# Altium schematic symbol library AudioMoth 1.1.SCHLIB: 220 symbols (part 2 of 3)
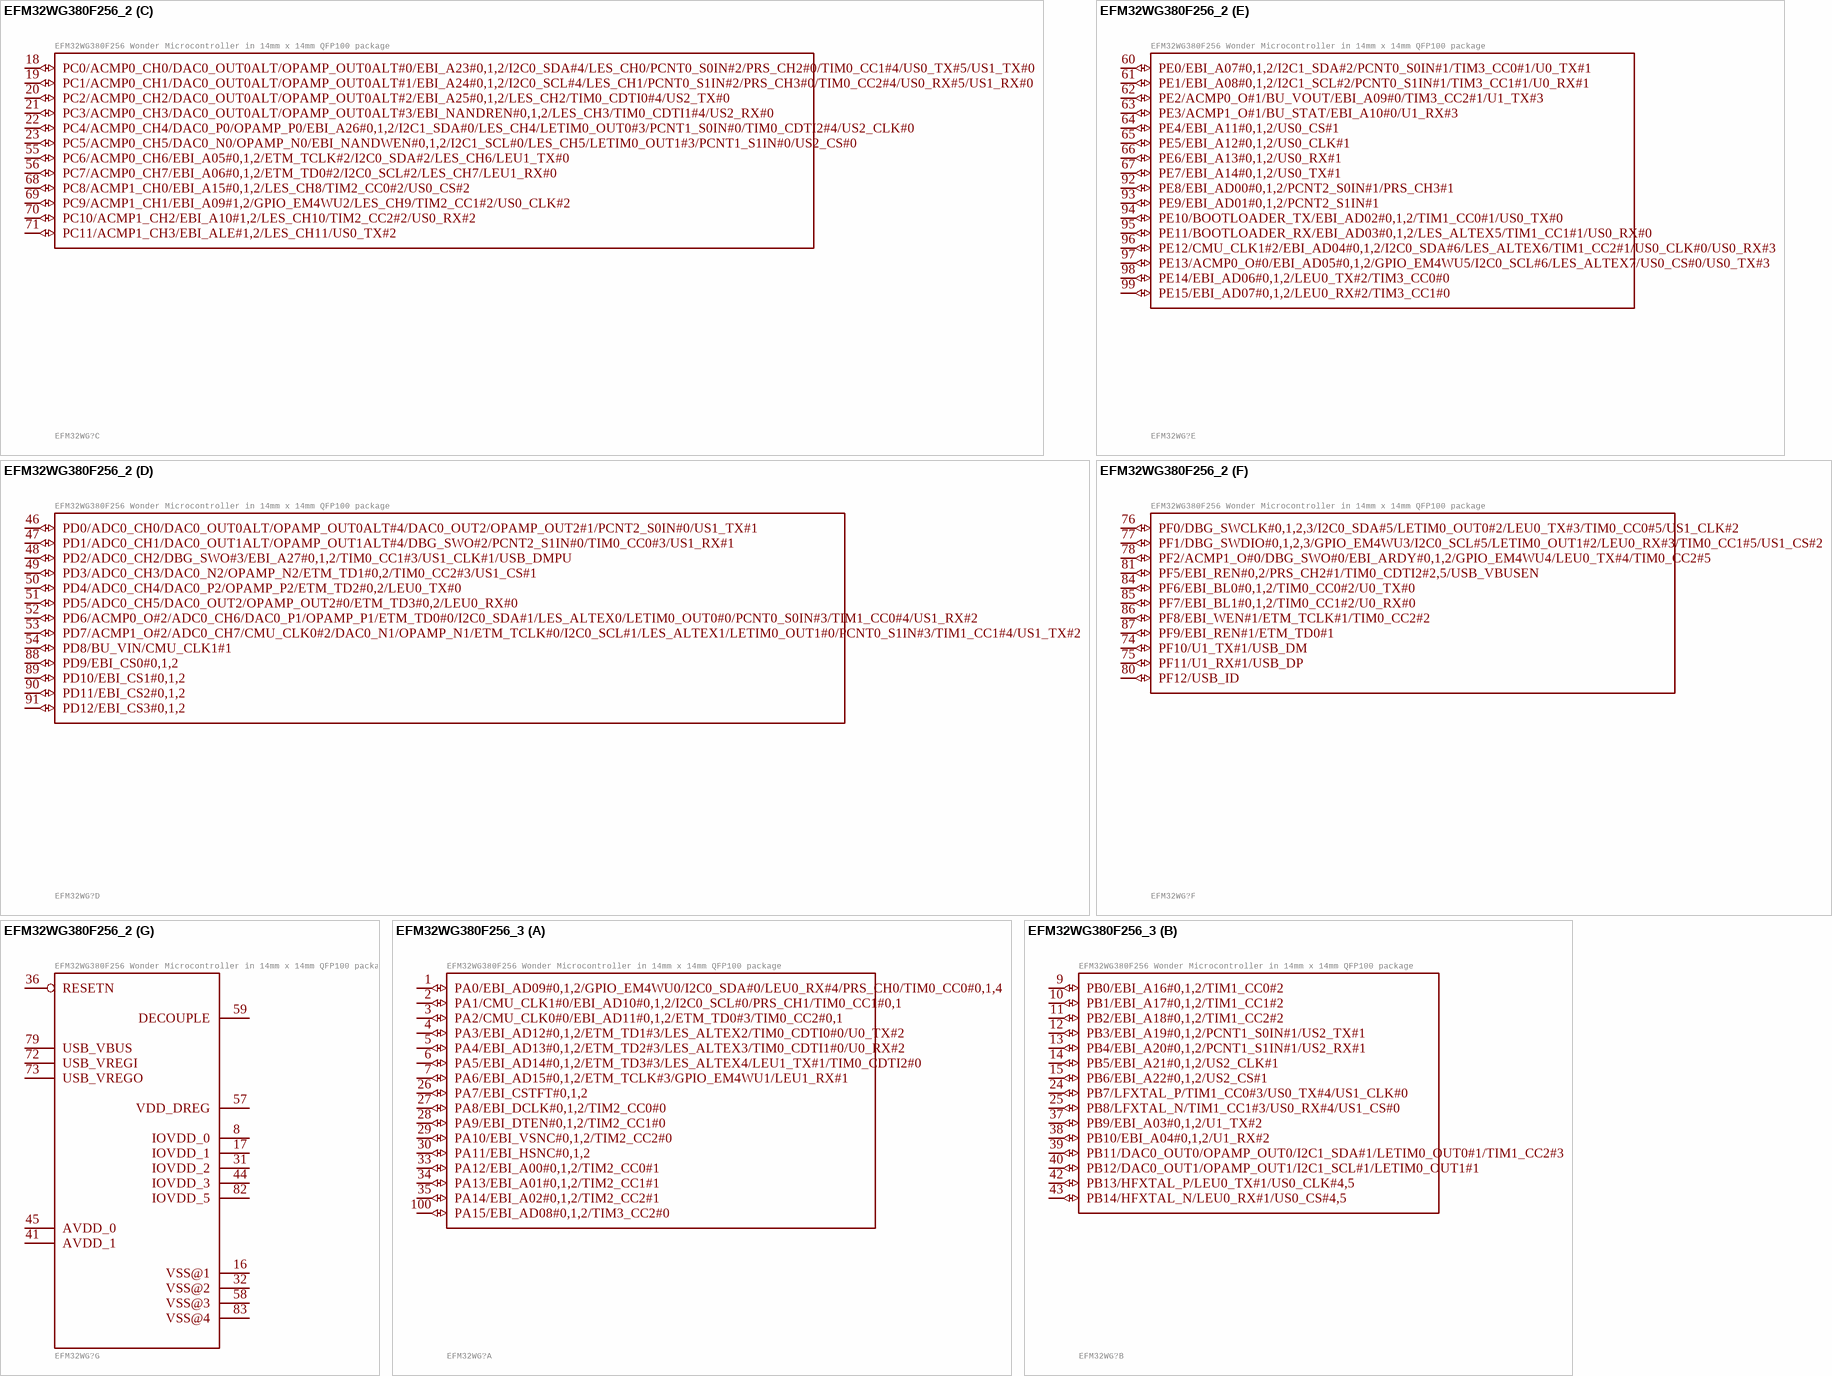
[diagram p15: symbols EFM32WG380F256_2 to EFM32WG380F256_3]

## EFM32WG380F256_2
designator EFM32WG?, comment EFM32WG380F256 Wonder Microcontroller in 14mm x 14mm QFP100 package
GateName_1: A; SymbolName_1: EFM32WG380F256_A; GateName_2: B; SymbolName_2: EFM32WG380F256_B; GateName_3: C; SymbolName_3: EFM32WG380F256_C; GateName_4: D; SymbolName_4: EFM32WG380F256_D; GateName_5: E; SymbolName_5: EFM32WG380F256_E; GateName_6: F; SymbolName_6: EFM32WG380F256_F; GateName_7: PWR; SymbolName_7: EFM32WG380F256_PWR; LibraryName: AudioMoth 1.1.0; DeviceSetName: EFM32WG380F256; Package: QFP100
footprint QFP100
part A pins: 1 PA0/EBI_AD09#0,1,2/GPIO_EM4WU0/I2C0_SDA#0/LEU0_RX#4/PRS_CH0/TIM0_CC0#0,1,4 (io), 2 PA1/CMU_CLK1#0/EBI_AD10#0,1,2/I2C0_SCL#0/PRS_CH1/TIM0_CC1#0,1 (io), 3 PA2/CMU_CLK0#0/EBI_AD11#0,1,2/ETM_TD0#3/TIM0_CC2#0,1 (io), 4 PA3/EBI_AD12#0,1,2/ETM_TD1#3/LES_ALTEX2/TIM0_CDTI0#0/U0_TX#2 (io), 5 PA4/EBI_AD13#0,1,2/ETM_TD2#3/LES_ALTEX3/TIM0_CDTI1#0/U0_RX#2 (io), 6 PA5/EBI_AD14#0,1,2/ETM_TD3#3/LES_ALTEX4/LEU1_TX#1/TIM0_CDTI2#0 (io), 7 PA6/EBI_AD15#0,1,2/ETM_TCLK#3/GPIO_EM4WU1/LEU1_RX#1 (io), 26 PA7/EBI_CSTFT#0,1,2 (io), 27 PA8/EBI_DCLK#0,1,2/TIM2_CC0#0 (io), 28 PA9/EBI_DTEN#0,1,2/TIM2_CC1#0 (io), 29 PA10/EBI_VSNC#0,1,2/TIM2_CC2#0 (io), 30 PA11/EBI_HSNC#0,1,2 (io), 33 PA12/EBI_A00#0,1,2/TIM2_CC0#1 (io), 34 PA13/EBI_A01#0,1,2/TIM2_CC1#1 (io), 35 PA14/EBI_A02#0,1,2/TIM2_CC2#1 (io), 100 PA15/EBI_AD08#0,1,2/TIM3_CC2#0 (io)
part B pins: 9 PB0/EBI_A16#0,1,2/TIM1_CC0#2 (io), 10 PB1/EBI_A17#0,1,2/TIM1_CC1#2 (io), 11 PB2/EBI_A18#0,1,2/TIM1_CC2#2 (io), 12 PB3/EBI_A19#0,1,2/PCNT1_S0IN#1/US2_TX#1 (io), 13 PB4/EBI_A20#0,1,2/PCNT1_S1IN#1/US2_RX#1 (io), 14 PB5/EBI_A21#0,1,2/US2_CLK#1 (io), 15 PB6/EBI_A22#0,1,2/US2_CS#1 (io), 24 PB7/LFXTAL_P/TIM1_CC0#3/US0_TX#4/US1_CLK#0 (io), 25 PB8/LFXTAL_N/TIM1_CC1#3/US0_RX#4/US1_CS#0 (io), 37 PB9/EBI_A03#0,1,2/U1_TX#2 (io), 38 PB10/EBI_A04#0,1,2/U1_RX#2 (io), 39 PB11/DAC0_OUT0/OPAMP_OUT0/I2C1_SDA#1/LETIM0_OUT0#1/TIM1_CC2#3 (io), 40 PB12/DAC0_OUT1/OPAMP_OUT1/I2C1_SCL#1/LETIM0_OUT1#1 (io), 42 PB13/HFXTAL_P/LEU0_TX#1/US0_CLK#4,5 (io), 43 PB14/HFXTAL_N/LEU0_RX#1/US0_CS#4,5 (io)
part C pins: 18 PC0/ACMP0_CH0/DAC0_OUT0ALT/OPAMP_OUT0ALT#0/EBI_A23#0,1,2/I2C0_SDA#4/LES_CH0/PCNT0_S0IN#2/PRS_CH2#0/TIM0_CC1#4/US0_TX#5/US1_TX#0 (io), 19 PC1/ACMP0_CH1/DAC0_OUT0ALT/OPAMP_OUT0ALT#1/EBI_A24#0,1,2/I2C0_SCL#4/LES_CH1/PCNT0_S1IN#2/PRS_CH3#0/TIM0_CC2#4/US0_RX#5/US1_RX#0 (io), 20 PC2/ACMP0_CH2/DAC0_OUT0ALT/OPAMP_OUT0ALT#2/EBI_A25#0,1,2/LES_CH2/TIM0_CDTI0#4/US2_TX#0 (io), 21 PC3/ACMP0_CH3/DAC0_OUT0ALT/OPAMP_OUT0ALT#3/EBI_NANDREN#0,1,2/LES_CH3/TIM0_CDTI1#4/US2_RX#0 (io), 22 PC4/ACMP0_CH4/DAC0_P0/OPAMP_P0/EBI_A26#0,1,2/I2C1_SDA#0/LES_CH4/LETIM0_OUT0#3/PCNT1_S0IN#0/TIM0_CDTI2#4/US2_CLK#0 (io), 23 PC5/ACMP0_CH5/DAC0_N0/OPAMP_N0/EBI_NANDWEN#0,1,2/I2C1_SCL#0/LES_CH5/LETIM0_OUT1#3/PCNT1_S1IN#0/US2_CS#0 (io), 55 PC6/ACMP0_CH6/EBI_A05#0,1,2/ETM_TCLK#2/I2C0_SDA#2/LES_CH6/LEU1_TX#0 (io), 56 PC7/ACMP0_CH7/EBI_A06#0,1,2/ETM_TD0#2/I2C0_SCL#2/LES_CH7/LEU1_RX#0 (io), 68 PC8/ACMP1_CH0/EBI_A15#0,1,2/LES_CH8/TIM2_CC0#2/US0_CS#2 (io), 69 PC9/ACMP1_CH1/EBI_A09#1,2/GPIO_EM4WU2/LES_CH9/TIM2_CC1#2/US0_CLK#2 (io), 70 PC10/ACMP1_CH2/EBI_A10#1,2/LES_CH10/TIM2_CC2#2/US0_RX#2 (io), 71 PC11/ACMP1_CH3/EBI_ALE#1,2/LES_CH11/US0_TX#2 (io)
part D pins: 46 PD0/ADC0_CH0/DAC0_OUT0ALT/OPAMP_OUT0ALT#4/DAC0_OUT2/OPAMP_OUT2#1/PCNT2_S0IN#0/US1_TX#1 (io), 47 PD1/ADC0_CH1/DAC0_OUT1ALT/OPAMP_OUT1ALT#4/DBG_SWO#2/PCNT2_S1IN#0/TIM0_CC0#3/US1_RX#1 (io), 48 PD2/ADC0_CH2/DBG_SWO#3/EBI_A27#0,1,2/TIM0_CC1#3/US1_CLK#1/USB_DMPU (io), 49 PD3/ADC0_CH3/DAC0_N2/OPAMP_N2/ETM_TD1#0,2/TIM0_CC2#3/US1_CS#1 (io), 50 PD4/ADC0_CH4/DAC0_P2/OPAMP_P2/ETM_TD2#0,2/LEU0_TX#0 (io), 51 PD5/ADC0_CH5/DAC0_OUT2/OPAMP_OUT2#0/ETM_TD3#0,2/LEU0_RX#0 (io), 52 PD6/ACMP0_O#2/ADC0_CH6/DAC0_P1/OPAMP_P1/ETM_TD0#0/I2C0_SDA#1/LES_ALTEX0/LETIM0_OUT0#0/PCNT0_S0IN#3/TIM1_CC0#4/US1_RX#2 (io), 53 PD7/ACMP1_O#2/ADC0_CH7/CMU_CLK0#2/DAC0_N1/OPAMP_N1/ETM_TCLK#0/I2C0_SCL#1/LES_ALTEX1/LETIM0_OUT1#0/PCNT0_S1IN#3/TIM1_CC1#4/US1_TX#2 (io), 54 PD8/BU_VIN/CMU_CLK1#1 (io), 88 PD9/EBI_CS0#0,1,2 (io), 89 PD10/EBI_CS1#0,1,2 (io), 90 PD11/EBI_CS2#0,1,2 (io), 91 PD12/EBI_CS3#0,1,2 (io)
part E pins: 60 PE0/EBI_A07#0,1,2/I2C1_SDA#2/PCNT0_S0IN#1/TIM3_CC0#1/U0_TX#1 (io), 61 PE1/EBI_A08#0,1,2/I2C1_SCL#2/PCNT0_S1IN#1/TIM3_CC1#1/U0_RX#1 (io), 62 PE2/ACMP0_O#1/BU_VOUT/EBI_A09#0/TIM3_CC2#1/U1_TX#3 (io), 63 PE3/ACMP1_O#1/BU_STAT/EBI_A10#0/U1_RX#3 (io), 64 PE4/EBI_A11#0,1,2/US0_CS#1 (io), 65 PE5/EBI_A12#0,1,2/US0_CLK#1 (io), 66 PE6/EBI_A13#0,1,2/US0_RX#1 (io), 67 PE7/EBI_A14#0,1,2/US0_TX#1 (io), 92 PE8/EBI_AD00#0,1,2/PCNT2_S0IN#1/PRS_CH3#1 (io), 93 PE9/EBI_AD01#0,1,2/PCNT2_S1IN#1 (io), 94 PE10/BOOTLOADER_TX/EBI_AD02#0,1,2/TIM1_CC0#1/US0_TX#0 (io), 95 PE11/BOOTLOADER_RX/EBI_AD03#0,1,2/LES_ALTEX5/TIM1_CC1#1/US0_RX#0 (io), 96 PE12/CMU_CLK1#2/EBI_AD04#0,1,2/I2C0_SDA#6/LES_ALTEX6/TIM1_CC2#1/US0_CLK#0/US0_RX#3 (io), 97 PE13/ACMP0_O#0/EBI_AD05#0,1,2/GPIO_EM4WU5/I2C0_SCL#6/LES_ALTEX7/US0_CS#0/US0_TX#3 (io), 98 PE14/EBI_AD06#0,1,2/LEU0_TX#2/TIM3_CC0#0 (io), 99 PE15/EBI_AD07#0,1,2/LEU0_RX#2/TIM3_CC1#0 (io)
part F pins: 74 PF10/U1_TX#1/USB_DM (io), 75 PF11/U1_RX#1/USB_DP (io), 76 PF0/DBG_SWCLK#0,1,2,3/I2C0_SDA#5/LETIM0_OUT0#2/LEU0_TX#3/TIM0_CC0#5/US1_CLK#2 (io), 77 PF1/DBG_SWDIO#0,1,2,3/GPIO_EM4WU3/I2C0_SCL#5/LETIM0_OUT1#2/LEU0_RX#3/TIM0_CC1#5/US1_CS#2 (io), 78 PF2/ACMP1_O#0/DBG_SWO#0/EBI_ARDY#0,1,2/GPIO_EM4WU4/LEU0_TX#4/TIM0_CC2#5 (io), 80 PF12/USB_ID (io), 81 PF5/EBI_REN#0,2/PRS_CH2#1/TIM0_CDTI2#2,5/USB_VBUSEN (io), 84 PF6/EBI_BL0#0,1,2/TIM0_CC0#2/U0_TX#0 (io), 85 PF7/EBI_BL1#0,1,2/TIM0_CC1#2/U0_RX#0 (io), 86 PF8/EBI_WEN#1/ETM_TCLK#1/TIM0_CC2#2 (io), 87 PF9/EBI_REN#1/ETM_TD0#1 (io)
part G pins: 8 IOVDD_0 (power), 16 VSS@1 (power), 17 IOVDD_1 (power), 31 IOVDD_2 (power), 32 VSS@2 (power), 36 RESETN, 41 AVDD_1 (power), 44 IOVDD_3 (power), 45 AVDD_0 (power), 57 VDD_DREG (power), 58 VSS@3 (power), 59 DECOUPLE (power), 72 USB_VREGI (power), 73 USB_VREGO (power), 79 USB_VBUS (power), 82 IOVDD_5 (power), 83 VSS@4 (power)

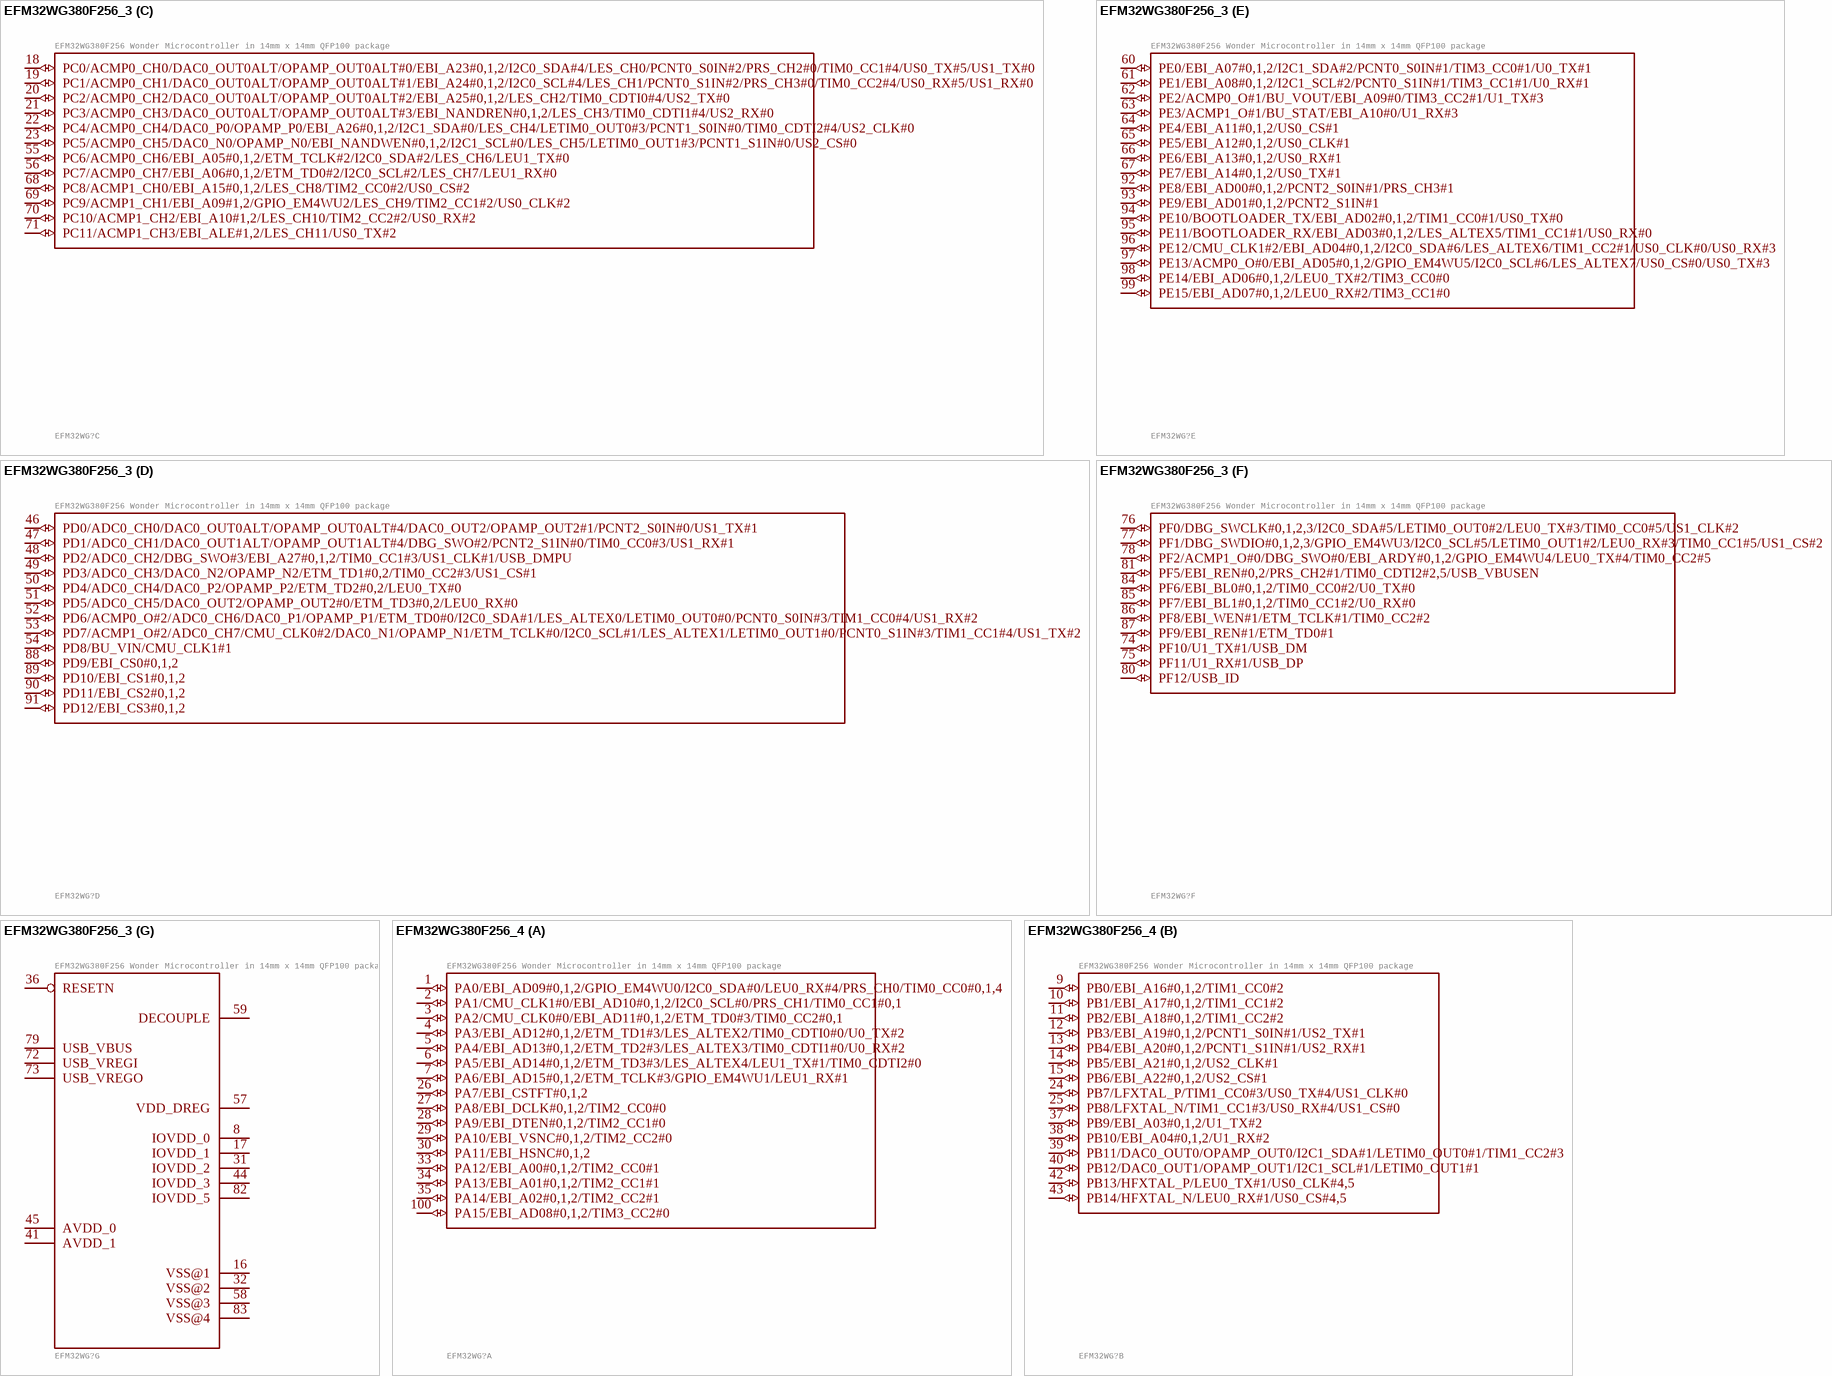
[diagram p7: symbols EFM32WG380F256_3 to EFM32WG380F256_4]

## EFM32WG380F256_3
designator EFM32WG?, comment EFM32WG380F256 Wonder Microcontroller in 14mm x 14mm QFP100 package
GateName_1: A; SymbolName_1: EFM32WG380F256_A; GateName_2: B; SymbolName_2: EFM32WG380F256_B; GateName_3: C; SymbolName_3: EFM32WG380F256_C; GateName_4: D; SymbolName_4: EFM32WG380F256_D; GateName_5: E; SymbolName_5: EFM32WG380F256_E; GateName_6: F; SymbolName_6: EFM32WG380F256_F; GateName_7: PWR; SymbolName_7: EFM32WG380F256_PWR; LibraryName: AudioMoth 1.1.0; DeviceSetName: EFM32WG380F256; Package: QFP100
footprint QFP100
part A pins: 1 PA0/EBI_AD09#0,1,2/GPIO_EM4WU0/I2C0_SDA#0/LEU0_RX#4/PRS_CH0/TIM0_CC0#0,1,4 (io), 2 PA1/CMU_CLK1#0/EBI_AD10#0,1,2/I2C0_SCL#0/PRS_CH1/TIM0_CC1#0,1 (io), 3 PA2/CMU_CLK0#0/EBI_AD11#0,1,2/ETM_TD0#3/TIM0_CC2#0,1 (io), 4 PA3/EBI_AD12#0,1,2/ETM_TD1#3/LES_ALTEX2/TIM0_CDTI0#0/U0_TX#2 (io), 5 PA4/EBI_AD13#0,1,2/ETM_TD2#3/LES_ALTEX3/TIM0_CDTI1#0/U0_RX#2 (io), 6 PA5/EBI_AD14#0,1,2/ETM_TD3#3/LES_ALTEX4/LEU1_TX#1/TIM0_CDTI2#0 (io), 7 PA6/EBI_AD15#0,1,2/ETM_TCLK#3/GPIO_EM4WU1/LEU1_RX#1 (io), 26 PA7/EBI_CSTFT#0,1,2 (io), 27 PA8/EBI_DCLK#0,1,2/TIM2_CC0#0 (io), 28 PA9/EBI_DTEN#0,1,2/TIM2_CC1#0 (io), 29 PA10/EBI_VSNC#0,1,2/TIM2_CC2#0 (io), 30 PA11/EBI_HSNC#0,1,2 (io), 33 PA12/EBI_A00#0,1,2/TIM2_CC0#1 (io), 34 PA13/EBI_A01#0,1,2/TIM2_CC1#1 (io), 35 PA14/EBI_A02#0,1,2/TIM2_CC2#1 (io), 100 PA15/EBI_AD08#0,1,2/TIM3_CC2#0 (io)
part B pins: 9 PB0/EBI_A16#0,1,2/TIM1_CC0#2 (io), 10 PB1/EBI_A17#0,1,2/TIM1_CC1#2 (io), 11 PB2/EBI_A18#0,1,2/TIM1_CC2#2 (io), 12 PB3/EBI_A19#0,1,2/PCNT1_S0IN#1/US2_TX#1 (io), 13 PB4/EBI_A20#0,1,2/PCNT1_S1IN#1/US2_RX#1 (io), 14 PB5/EBI_A21#0,1,2/US2_CLK#1 (io), 15 PB6/EBI_A22#0,1,2/US2_CS#1 (io), 24 PB7/LFXTAL_P/TIM1_CC0#3/US0_TX#4/US1_CLK#0 (io), 25 PB8/LFXTAL_N/TIM1_CC1#3/US0_RX#4/US1_CS#0 (io), 37 PB9/EBI_A03#0,1,2/U1_TX#2 (io), 38 PB10/EBI_A04#0,1,2/U1_RX#2 (io), 39 PB11/DAC0_OUT0/OPAMP_OUT0/I2C1_SDA#1/LETIM0_OUT0#1/TIM1_CC2#3 (io), 40 PB12/DAC0_OUT1/OPAMP_OUT1/I2C1_SCL#1/LETIM0_OUT1#1 (io), 42 PB13/HFXTAL_P/LEU0_TX#1/US0_CLK#4,5 (io), 43 PB14/HFXTAL_N/LEU0_RX#1/US0_CS#4,5 (io)
part C pins: 18 PC0/ACMP0_CH0/DAC0_OUT0ALT/OPAMP_OUT0ALT#0/EBI_A23#0,1,2/I2C0_SDA#4/LES_CH0/PCNT0_S0IN#2/PRS_CH2#0/TIM0_CC1#4/US0_TX#5/US1_TX#0 (io), 19 PC1/ACMP0_CH1/DAC0_OUT0ALT/OPAMP_OUT0ALT#1/EBI_A24#0,1,2/I2C0_SCL#4/LES_CH1/PCNT0_S1IN#2/PRS_CH3#0/TIM0_CC2#4/US0_RX#5/US1_RX#0 (io), 20 PC2/ACMP0_CH2/DAC0_OUT0ALT/OPAMP_OUT0ALT#2/EBI_A25#0,1,2/LES_CH2/TIM0_CDTI0#4/US2_TX#0 (io), 21 PC3/ACMP0_CH3/DAC0_OUT0ALT/OPAMP_OUT0ALT#3/EBI_NANDREN#0,1,2/LES_CH3/TIM0_CDTI1#4/US2_RX#0 (io), 22 PC4/ACMP0_CH4/DAC0_P0/OPAMP_P0/EBI_A26#0,1,2/I2C1_SDA#0/LES_CH4/LETIM0_OUT0#3/PCNT1_S0IN#0/TIM0_CDTI2#4/US2_CLK#0 (io), 23 PC5/ACMP0_CH5/DAC0_N0/OPAMP_N0/EBI_NANDWEN#0,1,2/I2C1_SCL#0/LES_CH5/LETIM0_OUT1#3/PCNT1_S1IN#0/US2_CS#0 (io), 55 PC6/ACMP0_CH6/EBI_A05#0,1,2/ETM_TCLK#2/I2C0_SDA#2/LES_CH6/LEU1_TX#0 (io), 56 PC7/ACMP0_CH7/EBI_A06#0,1,2/ETM_TD0#2/I2C0_SCL#2/LES_CH7/LEU1_RX#0 (io), 68 PC8/ACMP1_CH0/EBI_A15#0,1,2/LES_CH8/TIM2_CC0#2/US0_CS#2 (io), 69 PC9/ACMP1_CH1/EBI_A09#1,2/GPIO_EM4WU2/LES_CH9/TIM2_CC1#2/US0_CLK#2 (io), 70 PC10/ACMP1_CH2/EBI_A10#1,2/LES_CH10/TIM2_CC2#2/US0_RX#2 (io), 71 PC11/ACMP1_CH3/EBI_ALE#1,2/LES_CH11/US0_TX#2 (io)
part D pins: 46 PD0/ADC0_CH0/DAC0_OUT0ALT/OPAMP_OUT0ALT#4/DAC0_OUT2/OPAMP_OUT2#1/PCNT2_S0IN#0/US1_TX#1 (io), 47 PD1/ADC0_CH1/DAC0_OUT1ALT/OPAMP_OUT1ALT#4/DBG_SWO#2/PCNT2_S1IN#0/TIM0_CC0#3/US1_RX#1 (io), 48 PD2/ADC0_CH2/DBG_SWO#3/EBI_A27#0,1,2/TIM0_CC1#3/US1_CLK#1/USB_DMPU (io), 49 PD3/ADC0_CH3/DAC0_N2/OPAMP_N2/ETM_TD1#0,2/TIM0_CC2#3/US1_CS#1 (io), 50 PD4/ADC0_CH4/DAC0_P2/OPAMP_P2/ETM_TD2#0,2/LEU0_TX#0 (io), 51 PD5/ADC0_CH5/DAC0_OUT2/OPAMP_OUT2#0/ETM_TD3#0,2/LEU0_RX#0 (io), 52 PD6/ACMP0_O#2/ADC0_CH6/DAC0_P1/OPAMP_P1/ETM_TD0#0/I2C0_SDA#1/LES_ALTEX0/LETIM0_OUT0#0/PCNT0_S0IN#3/TIM1_CC0#4/US1_RX#2 (io), 53 PD7/ACMP1_O#2/ADC0_CH7/CMU_CLK0#2/DAC0_N1/OPAMP_N1/ETM_TCLK#0/I2C0_SCL#1/LES_ALTEX1/LETIM0_OUT1#0/PCNT0_S1IN#3/TIM1_CC1#4/US1_TX#2 (io), 54 PD8/BU_VIN/CMU_CLK1#1 (io), 88 PD9/EBI_CS0#0,1,2 (io), 89 PD10/EBI_CS1#0,1,2 (io), 90 PD11/EBI_CS2#0,1,2 (io), 91 PD12/EBI_CS3#0,1,2 (io)
part E pins: 60 PE0/EBI_A07#0,1,2/I2C1_SDA#2/PCNT0_S0IN#1/TIM3_CC0#1/U0_TX#1 (io), 61 PE1/EBI_A08#0,1,2/I2C1_SCL#2/PCNT0_S1IN#1/TIM3_CC1#1/U0_RX#1 (io), 62 PE2/ACMP0_O#1/BU_VOUT/EBI_A09#0/TIM3_CC2#1/U1_TX#3 (io), 63 PE3/ACMP1_O#1/BU_STAT/EBI_A10#0/U1_RX#3 (io), 64 PE4/EBI_A11#0,1,2/US0_CS#1 (io), 65 PE5/EBI_A12#0,1,2/US0_CLK#1 (io), 66 PE6/EBI_A13#0,1,2/US0_RX#1 (io), 67 PE7/EBI_A14#0,1,2/US0_TX#1 (io), 92 PE8/EBI_AD00#0,1,2/PCNT2_S0IN#1/PRS_CH3#1 (io), 93 PE9/EBI_AD01#0,1,2/PCNT2_S1IN#1 (io), 94 PE10/BOOTLOADER_TX/EBI_AD02#0,1,2/TIM1_CC0#1/US0_TX#0 (io), 95 PE11/BOOTLOADER_RX/EBI_AD03#0,1,2/LES_ALTEX5/TIM1_CC1#1/US0_RX#0 (io), 96 PE12/CMU_CLK1#2/EBI_AD04#0,1,2/I2C0_SDA#6/LES_ALTEX6/TIM1_CC2#1/US0_CLK#0/US0_RX#3 (io), 97 PE13/ACMP0_O#0/EBI_AD05#0,1,2/GPIO_EM4WU5/I2C0_SCL#6/LES_ALTEX7/US0_CS#0/US0_TX#3 (io), 98 PE14/EBI_AD06#0,1,2/LEU0_TX#2/TIM3_CC0#0 (io), 99 PE15/EBI_AD07#0,1,2/LEU0_RX#2/TIM3_CC1#0 (io)
part F pins: 74 PF10/U1_TX#1/USB_DM (io), 75 PF11/U1_RX#1/USB_DP (io), 76 PF0/DBG_SWCLK#0,1,2,3/I2C0_SDA#5/LETIM0_OUT0#2/LEU0_TX#3/TIM0_CC0#5/US1_CLK#2 (io), 77 PF1/DBG_SWDIO#0,1,2,3/GPIO_EM4WU3/I2C0_SCL#5/LETIM0_OUT1#2/LEU0_RX#3/TIM0_CC1#5/US1_CS#2 (io), 78 PF2/ACMP1_O#0/DBG_SWO#0/EBI_ARDY#0,1,2/GPIO_EM4WU4/LEU0_TX#4/TIM0_CC2#5 (io), 80 PF12/USB_ID (io), 81 PF5/EBI_REN#0,2/PRS_CH2#1/TIM0_CDTI2#2,5/USB_VBUSEN (io), 84 PF6/EBI_BL0#0,1,2/TIM0_CC0#2/U0_TX#0 (io), 85 PF7/EBI_BL1#0,1,2/TIM0_CC1#2/U0_RX#0 (io), 86 PF8/EBI_WEN#1/ETM_TCLK#1/TIM0_CC2#2 (io), 87 PF9/EBI_REN#1/ETM_TD0#1 (io)
part G pins: 8 IOVDD_0 (power), 16 VSS@1 (power), 17 IOVDD_1 (power), 31 IOVDD_2 (power), 32 VSS@2 (power), 36 RESETN, 41 AVDD_1 (power), 44 IOVDD_3 (power), 45 AVDD_0 (power), 57 VDD_DREG (power), 58 VSS@3 (power), 59 DECOUPLE (power), 72 USB_VREGI (power), 73 USB_VREGO (power), 79 USB_VBUS (power), 82 IOVDD_5 (power), 83 VSS@4 (power)

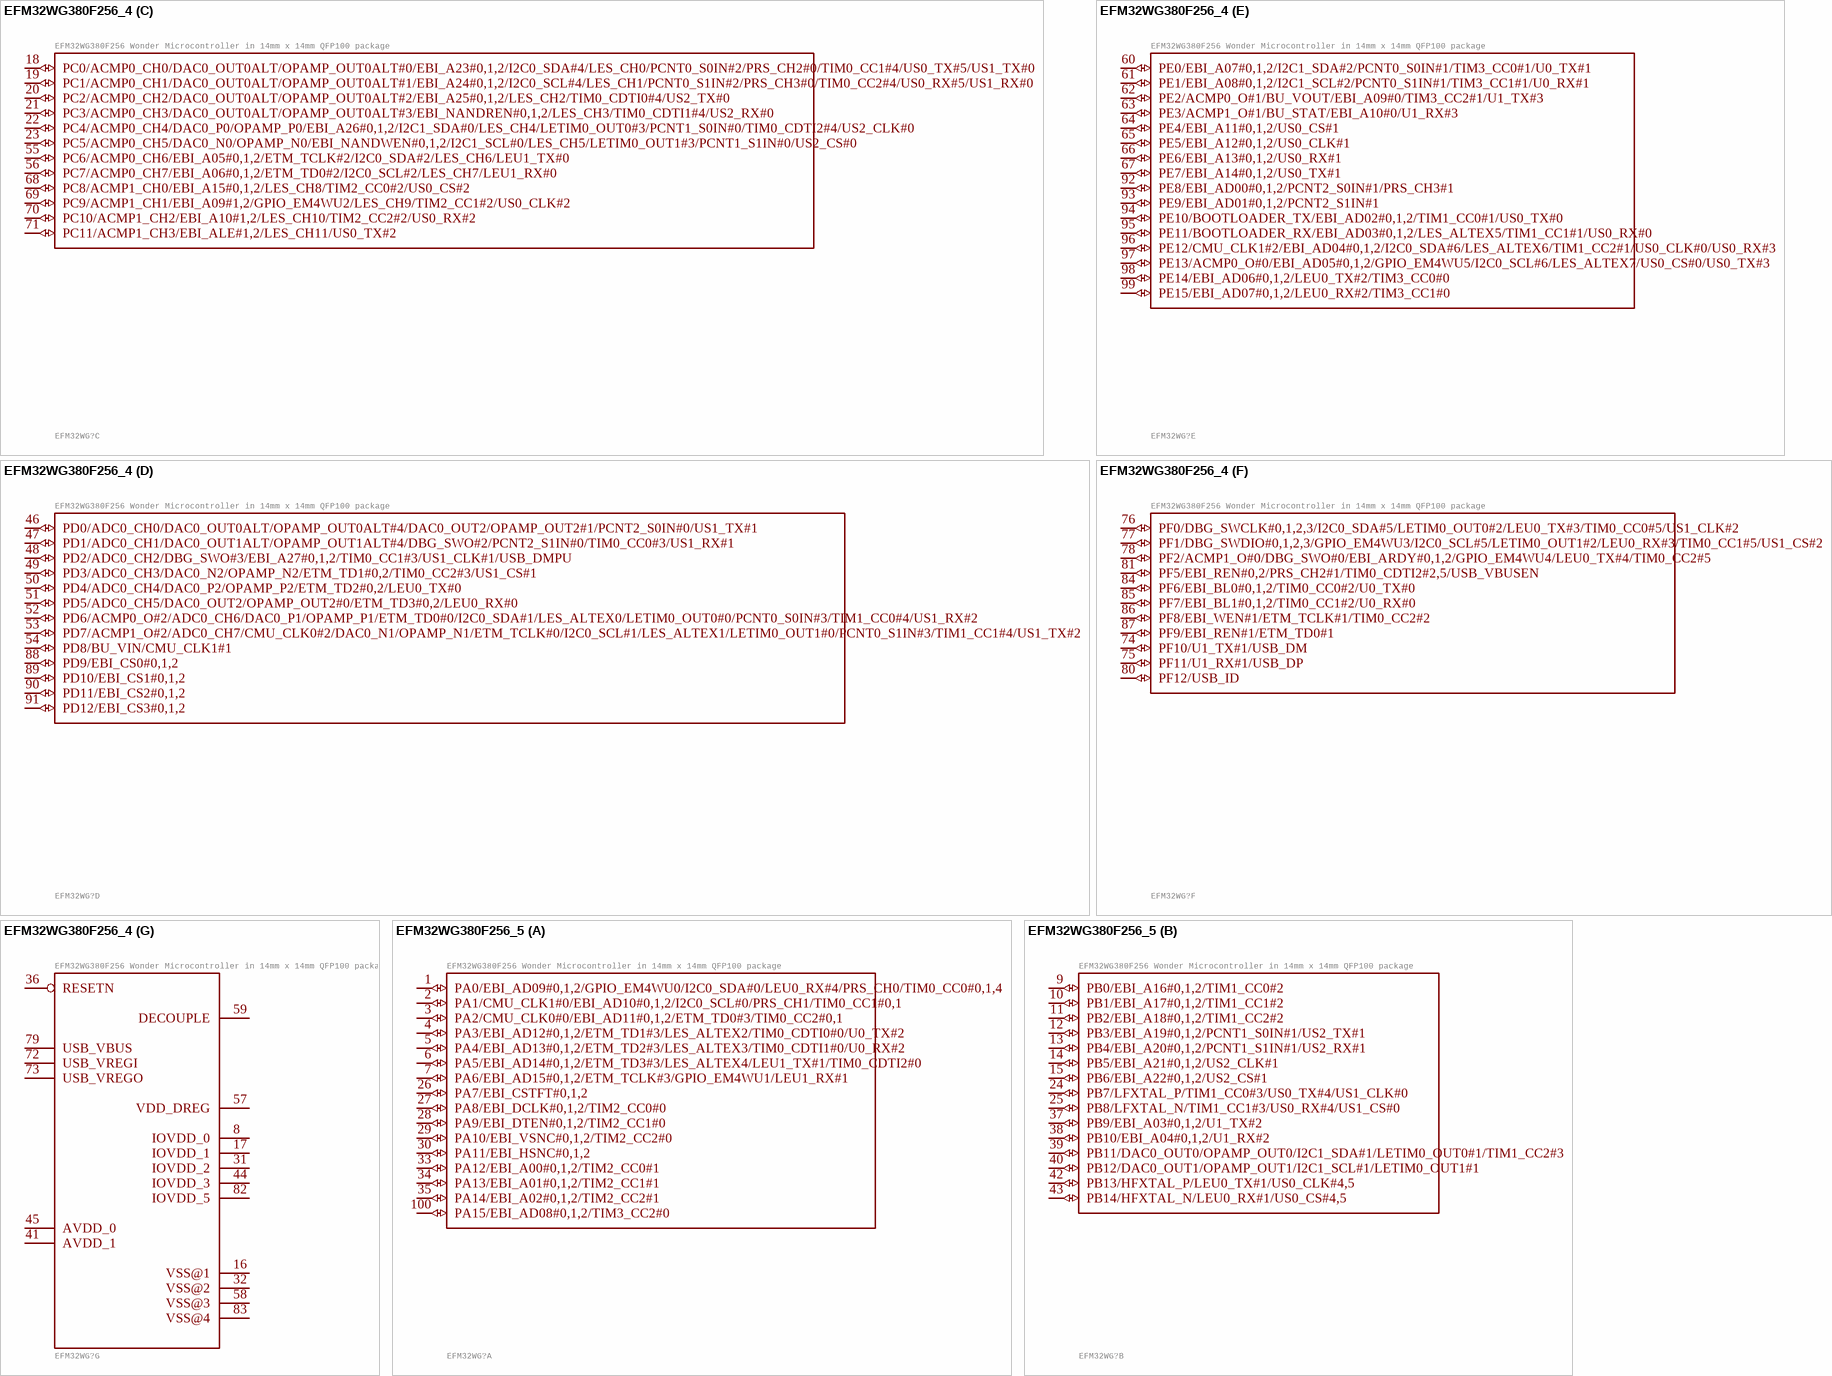
[diagram p8: symbols EFM32WG380F256_4 to EFM32WG380F256_5]

## EFM32WG380F256_4
designator EFM32WG?, comment EFM32WG380F256 Wonder Microcontroller in 14mm x 14mm QFP100 package
GateName_1: A; SymbolName_1: EFM32WG380F256_A; GateName_2: B; SymbolName_2: EFM32WG380F256_B; GateName_3: C; SymbolName_3: EFM32WG380F256_C; GateName_4: D; SymbolName_4: EFM32WG380F256_D; GateName_5: E; SymbolName_5: EFM32WG380F256_E; GateName_6: F; SymbolName_6: EFM32WG380F256_F; GateName_7: PWR; SymbolName_7: EFM32WG380F256_PWR; LibraryName: AudioMoth 1.1.0; DeviceSetName: EFM32WG380F256; Package: QFP100
footprint QFP100
part A pins: 1 PA0/EBI_AD09#0,1,2/GPIO_EM4WU0/I2C0_SDA#0/LEU0_RX#4/PRS_CH0/TIM0_CC0#0,1,4 (io), 2 PA1/CMU_CLK1#0/EBI_AD10#0,1,2/I2C0_SCL#0/PRS_CH1/TIM0_CC1#0,1 (io), 3 PA2/CMU_CLK0#0/EBI_AD11#0,1,2/ETM_TD0#3/TIM0_CC2#0,1 (io), 4 PA3/EBI_AD12#0,1,2/ETM_TD1#3/LES_ALTEX2/TIM0_CDTI0#0/U0_TX#2 (io), 5 PA4/EBI_AD13#0,1,2/ETM_TD2#3/LES_ALTEX3/TIM0_CDTI1#0/U0_RX#2 (io), 6 PA5/EBI_AD14#0,1,2/ETM_TD3#3/LES_ALTEX4/LEU1_TX#1/TIM0_CDTI2#0 (io), 7 PA6/EBI_AD15#0,1,2/ETM_TCLK#3/GPIO_EM4WU1/LEU1_RX#1 (io), 26 PA7/EBI_CSTFT#0,1,2 (io), 27 PA8/EBI_DCLK#0,1,2/TIM2_CC0#0 (io), 28 PA9/EBI_DTEN#0,1,2/TIM2_CC1#0 (io), 29 PA10/EBI_VSNC#0,1,2/TIM2_CC2#0 (io), 30 PA11/EBI_HSNC#0,1,2 (io), 33 PA12/EBI_A00#0,1,2/TIM2_CC0#1 (io), 34 PA13/EBI_A01#0,1,2/TIM2_CC1#1 (io), 35 PA14/EBI_A02#0,1,2/TIM2_CC2#1 (io), 100 PA15/EBI_AD08#0,1,2/TIM3_CC2#0 (io)
part B pins: 9 PB0/EBI_A16#0,1,2/TIM1_CC0#2 (io), 10 PB1/EBI_A17#0,1,2/TIM1_CC1#2 (io), 11 PB2/EBI_A18#0,1,2/TIM1_CC2#2 (io), 12 PB3/EBI_A19#0,1,2/PCNT1_S0IN#1/US2_TX#1 (io), 13 PB4/EBI_A20#0,1,2/PCNT1_S1IN#1/US2_RX#1 (io), 14 PB5/EBI_A21#0,1,2/US2_CLK#1 (io), 15 PB6/EBI_A22#0,1,2/US2_CS#1 (io), 24 PB7/LFXTAL_P/TIM1_CC0#3/US0_TX#4/US1_CLK#0 (io), 25 PB8/LFXTAL_N/TIM1_CC1#3/US0_RX#4/US1_CS#0 (io), 37 PB9/EBI_A03#0,1,2/U1_TX#2 (io), 38 PB10/EBI_A04#0,1,2/U1_RX#2 (io), 39 PB11/DAC0_OUT0/OPAMP_OUT0/I2C1_SDA#1/LETIM0_OUT0#1/TIM1_CC2#3 (io), 40 PB12/DAC0_OUT1/OPAMP_OUT1/I2C1_SCL#1/LETIM0_OUT1#1 (io), 42 PB13/HFXTAL_P/LEU0_TX#1/US0_CLK#4,5 (io), 43 PB14/HFXTAL_N/LEU0_RX#1/US0_CS#4,5 (io)
part C pins: 18 PC0/ACMP0_CH0/DAC0_OUT0ALT/OPAMP_OUT0ALT#0/EBI_A23#0,1,2/I2C0_SDA#4/LES_CH0/PCNT0_S0IN#2/PRS_CH2#0/TIM0_CC1#4/US0_TX#5/US1_TX#0 (io), 19 PC1/ACMP0_CH1/DAC0_OUT0ALT/OPAMP_OUT0ALT#1/EBI_A24#0,1,2/I2C0_SCL#4/LES_CH1/PCNT0_S1IN#2/PRS_CH3#0/TIM0_CC2#4/US0_RX#5/US1_RX#0 (io), 20 PC2/ACMP0_CH2/DAC0_OUT0ALT/OPAMP_OUT0ALT#2/EBI_A25#0,1,2/LES_CH2/TIM0_CDTI0#4/US2_TX#0 (io), 21 PC3/ACMP0_CH3/DAC0_OUT0ALT/OPAMP_OUT0ALT#3/EBI_NANDREN#0,1,2/LES_CH3/TIM0_CDTI1#4/US2_RX#0 (io), 22 PC4/ACMP0_CH4/DAC0_P0/OPAMP_P0/EBI_A26#0,1,2/I2C1_SDA#0/LES_CH4/LETIM0_OUT0#3/PCNT1_S0IN#0/TIM0_CDTI2#4/US2_CLK#0 (io), 23 PC5/ACMP0_CH5/DAC0_N0/OPAMP_N0/EBI_NANDWEN#0,1,2/I2C1_SCL#0/LES_CH5/LETIM0_OUT1#3/PCNT1_S1IN#0/US2_CS#0 (io), 55 PC6/ACMP0_CH6/EBI_A05#0,1,2/ETM_TCLK#2/I2C0_SDA#2/LES_CH6/LEU1_TX#0 (io), 56 PC7/ACMP0_CH7/EBI_A06#0,1,2/ETM_TD0#2/I2C0_SCL#2/LES_CH7/LEU1_RX#0 (io), 68 PC8/ACMP1_CH0/EBI_A15#0,1,2/LES_CH8/TIM2_CC0#2/US0_CS#2 (io), 69 PC9/ACMP1_CH1/EBI_A09#1,2/GPIO_EM4WU2/LES_CH9/TIM2_CC1#2/US0_CLK#2 (io), 70 PC10/ACMP1_CH2/EBI_A10#1,2/LES_CH10/TIM2_CC2#2/US0_RX#2 (io), 71 PC11/ACMP1_CH3/EBI_ALE#1,2/LES_CH11/US0_TX#2 (io)
part D pins: 46 PD0/ADC0_CH0/DAC0_OUT0ALT/OPAMP_OUT0ALT#4/DAC0_OUT2/OPAMP_OUT2#1/PCNT2_S0IN#0/US1_TX#1 (io), 47 PD1/ADC0_CH1/DAC0_OUT1ALT/OPAMP_OUT1ALT#4/DBG_SWO#2/PCNT2_S1IN#0/TIM0_CC0#3/US1_RX#1 (io), 48 PD2/ADC0_CH2/DBG_SWO#3/EBI_A27#0,1,2/TIM0_CC1#3/US1_CLK#1/USB_DMPU (io), 49 PD3/ADC0_CH3/DAC0_N2/OPAMP_N2/ETM_TD1#0,2/TIM0_CC2#3/US1_CS#1 (io), 50 PD4/ADC0_CH4/DAC0_P2/OPAMP_P2/ETM_TD2#0,2/LEU0_TX#0 (io), 51 PD5/ADC0_CH5/DAC0_OUT2/OPAMP_OUT2#0/ETM_TD3#0,2/LEU0_RX#0 (io), 52 PD6/ACMP0_O#2/ADC0_CH6/DAC0_P1/OPAMP_P1/ETM_TD0#0/I2C0_SDA#1/LES_ALTEX0/LETIM0_OUT0#0/PCNT0_S0IN#3/TIM1_CC0#4/US1_RX#2 (io), 53 PD7/ACMP1_O#2/ADC0_CH7/CMU_CLK0#2/DAC0_N1/OPAMP_N1/ETM_TCLK#0/I2C0_SCL#1/LES_ALTEX1/LETIM0_OUT1#0/PCNT0_S1IN#3/TIM1_CC1#4/US1_TX#2 (io), 54 PD8/BU_VIN/CMU_CLK1#1 (io), 88 PD9/EBI_CS0#0,1,2 (io), 89 PD10/EBI_CS1#0,1,2 (io), 90 PD11/EBI_CS2#0,1,2 (io), 91 PD12/EBI_CS3#0,1,2 (io)
part E pins: 60 PE0/EBI_A07#0,1,2/I2C1_SDA#2/PCNT0_S0IN#1/TIM3_CC0#1/U0_TX#1 (io), 61 PE1/EBI_A08#0,1,2/I2C1_SCL#2/PCNT0_S1IN#1/TIM3_CC1#1/U0_RX#1 (io), 62 PE2/ACMP0_O#1/BU_VOUT/EBI_A09#0/TIM3_CC2#1/U1_TX#3 (io), 63 PE3/ACMP1_O#1/BU_STAT/EBI_A10#0/U1_RX#3 (io), 64 PE4/EBI_A11#0,1,2/US0_CS#1 (io), 65 PE5/EBI_A12#0,1,2/US0_CLK#1 (io), 66 PE6/EBI_A13#0,1,2/US0_RX#1 (io), 67 PE7/EBI_A14#0,1,2/US0_TX#1 (io), 92 PE8/EBI_AD00#0,1,2/PCNT2_S0IN#1/PRS_CH3#1 (io), 93 PE9/EBI_AD01#0,1,2/PCNT2_S1IN#1 (io), 94 PE10/BOOTLOADER_TX/EBI_AD02#0,1,2/TIM1_CC0#1/US0_TX#0 (io), 95 PE11/BOOTLOADER_RX/EBI_AD03#0,1,2/LES_ALTEX5/TIM1_CC1#1/US0_RX#0 (io), 96 PE12/CMU_CLK1#2/EBI_AD04#0,1,2/I2C0_SDA#6/LES_ALTEX6/TIM1_CC2#1/US0_CLK#0/US0_RX#3 (io), 97 PE13/ACMP0_O#0/EBI_AD05#0,1,2/GPIO_EM4WU5/I2C0_SCL#6/LES_ALTEX7/US0_CS#0/US0_TX#3 (io), 98 PE14/EBI_AD06#0,1,2/LEU0_TX#2/TIM3_CC0#0 (io), 99 PE15/EBI_AD07#0,1,2/LEU0_RX#2/TIM3_CC1#0 (io)
part F pins: 74 PF10/U1_TX#1/USB_DM (io), 75 PF11/U1_RX#1/USB_DP (io), 76 PF0/DBG_SWCLK#0,1,2,3/I2C0_SDA#5/LETIM0_OUT0#2/LEU0_TX#3/TIM0_CC0#5/US1_CLK#2 (io), 77 PF1/DBG_SWDIO#0,1,2,3/GPIO_EM4WU3/I2C0_SCL#5/LETIM0_OUT1#2/LEU0_RX#3/TIM0_CC1#5/US1_CS#2 (io), 78 PF2/ACMP1_O#0/DBG_SWO#0/EBI_ARDY#0,1,2/GPIO_EM4WU4/LEU0_TX#4/TIM0_CC2#5 (io), 80 PF12/USB_ID (io), 81 PF5/EBI_REN#0,2/PRS_CH2#1/TIM0_CDTI2#2,5/USB_VBUSEN (io), 84 PF6/EBI_BL0#0,1,2/TIM0_CC0#2/U0_TX#0 (io), 85 PF7/EBI_BL1#0,1,2/TIM0_CC1#2/U0_RX#0 (io), 86 PF8/EBI_WEN#1/ETM_TCLK#1/TIM0_CC2#2 (io), 87 PF9/EBI_REN#1/ETM_TD0#1 (io)
part G pins: 8 IOVDD_0 (power), 16 VSS@1 (power), 17 IOVDD_1 (power), 31 IOVDD_2 (power), 32 VSS@2 (power), 36 RESETN, 41 AVDD_1 (power), 44 IOVDD_3 (power), 45 AVDD_0 (power), 57 VDD_DREG (power), 58 VSS@3 (power), 59 DECOUPLE (power), 72 USB_VREGI (power), 73 USB_VREGO (power), 79 USB_VBUS (power), 82 IOVDD_5 (power), 83 VSS@4 (power)

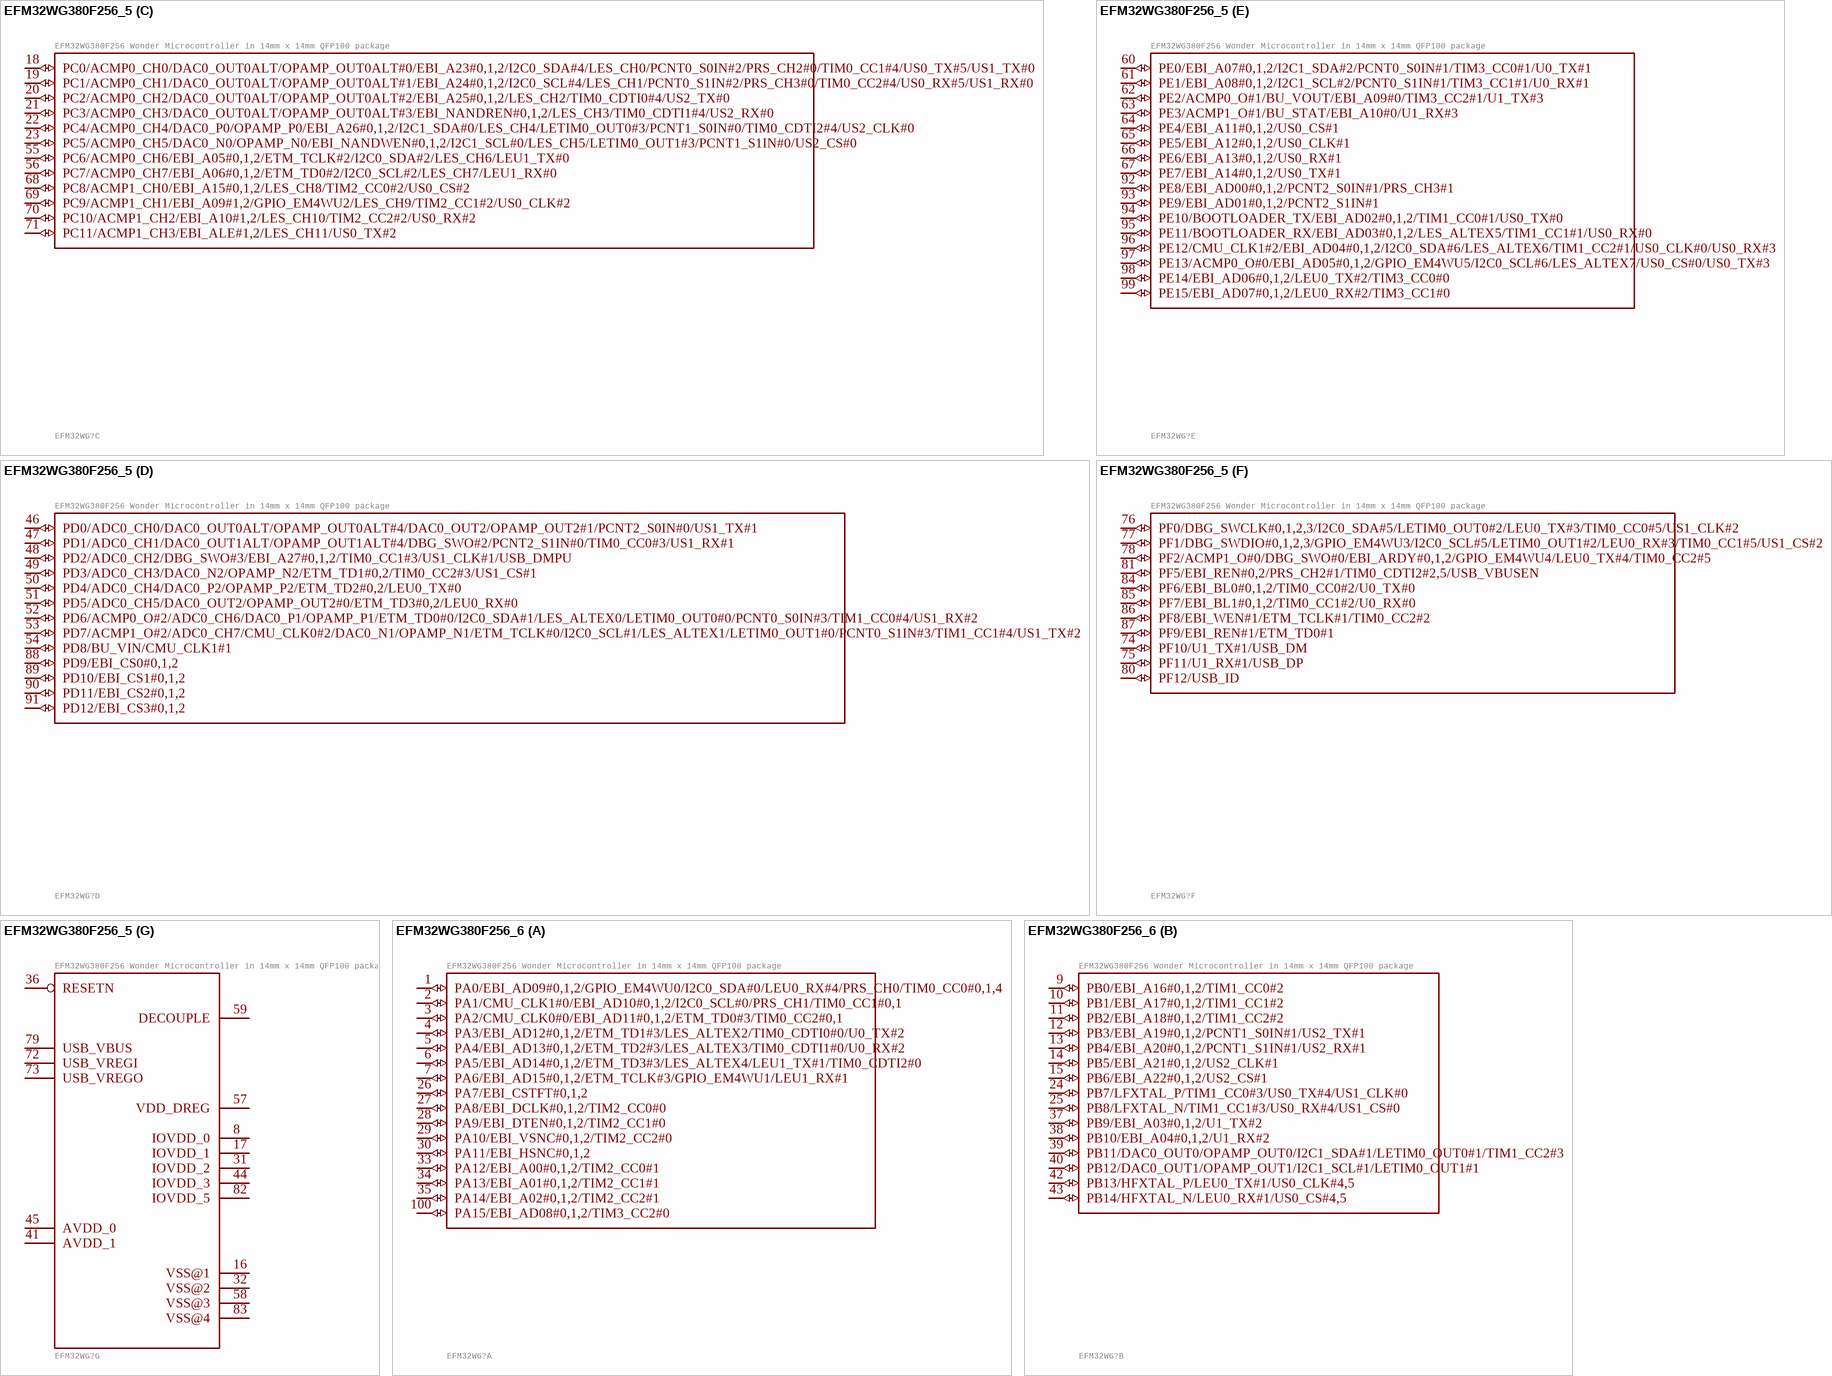
[diagram p9: symbols EFM32WG380F256_5 to EFM32WG380F256_6]

## EFM32WG380F256_5
designator EFM32WG?, comment EFM32WG380F256 Wonder Microcontroller in 14mm x 14mm QFP100 package
GateName_1: A; SymbolName_1: EFM32WG380F256_A; GateName_2: B; SymbolName_2: EFM32WG380F256_B; GateName_3: C; SymbolName_3: EFM32WG380F256_C; GateName_4: D; SymbolName_4: EFM32WG380F256_D; GateName_5: E; SymbolName_5: EFM32WG380F256_E; GateName_6: F; SymbolName_6: EFM32WG380F256_F; GateName_7: PWR; SymbolName_7: EFM32WG380F256_PWR; LibraryName: AudioMoth 1.1.0; DeviceSetName: EFM32WG380F256; Package: QFP100
footprint QFP100
part A pins: 1 PA0/EBI_AD09#0,1,2/GPIO_EM4WU0/I2C0_SDA#0/LEU0_RX#4/PRS_CH0/TIM0_CC0#0,1,4 (io), 2 PA1/CMU_CLK1#0/EBI_AD10#0,1,2/I2C0_SCL#0/PRS_CH1/TIM0_CC1#0,1 (io), 3 PA2/CMU_CLK0#0/EBI_AD11#0,1,2/ETM_TD0#3/TIM0_CC2#0,1 (io), 4 PA3/EBI_AD12#0,1,2/ETM_TD1#3/LES_ALTEX2/TIM0_CDTI0#0/U0_TX#2 (io), 5 PA4/EBI_AD13#0,1,2/ETM_TD2#3/LES_ALTEX3/TIM0_CDTI1#0/U0_RX#2 (io), 6 PA5/EBI_AD14#0,1,2/ETM_TD3#3/LES_ALTEX4/LEU1_TX#1/TIM0_CDTI2#0 (io), 7 PA6/EBI_AD15#0,1,2/ETM_TCLK#3/GPIO_EM4WU1/LEU1_RX#1 (io), 26 PA7/EBI_CSTFT#0,1,2 (io), 27 PA8/EBI_DCLK#0,1,2/TIM2_CC0#0 (io), 28 PA9/EBI_DTEN#0,1,2/TIM2_CC1#0 (io), 29 PA10/EBI_VSNC#0,1,2/TIM2_CC2#0 (io), 30 PA11/EBI_HSNC#0,1,2 (io), 33 PA12/EBI_A00#0,1,2/TIM2_CC0#1 (io), 34 PA13/EBI_A01#0,1,2/TIM2_CC1#1 (io), 35 PA14/EBI_A02#0,1,2/TIM2_CC2#1 (io), 100 PA15/EBI_AD08#0,1,2/TIM3_CC2#0 (io)
part B pins: 9 PB0/EBI_A16#0,1,2/TIM1_CC0#2 (io), 10 PB1/EBI_A17#0,1,2/TIM1_CC1#2 (io), 11 PB2/EBI_A18#0,1,2/TIM1_CC2#2 (io), 12 PB3/EBI_A19#0,1,2/PCNT1_S0IN#1/US2_TX#1 (io), 13 PB4/EBI_A20#0,1,2/PCNT1_S1IN#1/US2_RX#1 (io), 14 PB5/EBI_A21#0,1,2/US2_CLK#1 (io), 15 PB6/EBI_A22#0,1,2/US2_CS#1 (io), 24 PB7/LFXTAL_P/TIM1_CC0#3/US0_TX#4/US1_CLK#0 (io), 25 PB8/LFXTAL_N/TIM1_CC1#3/US0_RX#4/US1_CS#0 (io), 37 PB9/EBI_A03#0,1,2/U1_TX#2 (io), 38 PB10/EBI_A04#0,1,2/U1_RX#2 (io), 39 PB11/DAC0_OUT0/OPAMP_OUT0/I2C1_SDA#1/LETIM0_OUT0#1/TIM1_CC2#3 (io), 40 PB12/DAC0_OUT1/OPAMP_OUT1/I2C1_SCL#1/LETIM0_OUT1#1 (io), 42 PB13/HFXTAL_P/LEU0_TX#1/US0_CLK#4,5 (io), 43 PB14/HFXTAL_N/LEU0_RX#1/US0_CS#4,5 (io)
part C pins: 18 PC0/ACMP0_CH0/DAC0_OUT0ALT/OPAMP_OUT0ALT#0/EBI_A23#0,1,2/I2C0_SDA#4/LES_CH0/PCNT0_S0IN#2/PRS_CH2#0/TIM0_CC1#4/US0_TX#5/US1_TX#0 (io), 19 PC1/ACMP0_CH1/DAC0_OUT0ALT/OPAMP_OUT0ALT#1/EBI_A24#0,1,2/I2C0_SCL#4/LES_CH1/PCNT0_S1IN#2/PRS_CH3#0/TIM0_CC2#4/US0_RX#5/US1_RX#0 (io), 20 PC2/ACMP0_CH2/DAC0_OUT0ALT/OPAMP_OUT0ALT#2/EBI_A25#0,1,2/LES_CH2/TIM0_CDTI0#4/US2_TX#0 (io), 21 PC3/ACMP0_CH3/DAC0_OUT0ALT/OPAMP_OUT0ALT#3/EBI_NANDREN#0,1,2/LES_CH3/TIM0_CDTI1#4/US2_RX#0 (io), 22 PC4/ACMP0_CH4/DAC0_P0/OPAMP_P0/EBI_A26#0,1,2/I2C1_SDA#0/LES_CH4/LETIM0_OUT0#3/PCNT1_S0IN#0/TIM0_CDTI2#4/US2_CLK#0 (io), 23 PC5/ACMP0_CH5/DAC0_N0/OPAMP_N0/EBI_NANDWEN#0,1,2/I2C1_SCL#0/LES_CH5/LETIM0_OUT1#3/PCNT1_S1IN#0/US2_CS#0 (io), 55 PC6/ACMP0_CH6/EBI_A05#0,1,2/ETM_TCLK#2/I2C0_SDA#2/LES_CH6/LEU1_TX#0 (io), 56 PC7/ACMP0_CH7/EBI_A06#0,1,2/ETM_TD0#2/I2C0_SCL#2/LES_CH7/LEU1_RX#0 (io), 68 PC8/ACMP1_CH0/EBI_A15#0,1,2/LES_CH8/TIM2_CC0#2/US0_CS#2 (io), 69 PC9/ACMP1_CH1/EBI_A09#1,2/GPIO_EM4WU2/LES_CH9/TIM2_CC1#2/US0_CLK#2 (io), 70 PC10/ACMP1_CH2/EBI_A10#1,2/LES_CH10/TIM2_CC2#2/US0_RX#2 (io), 71 PC11/ACMP1_CH3/EBI_ALE#1,2/LES_CH11/US0_TX#2 (io)
part D pins: 46 PD0/ADC0_CH0/DAC0_OUT0ALT/OPAMP_OUT0ALT#4/DAC0_OUT2/OPAMP_OUT2#1/PCNT2_S0IN#0/US1_TX#1 (io), 47 PD1/ADC0_CH1/DAC0_OUT1ALT/OPAMP_OUT1ALT#4/DBG_SWO#2/PCNT2_S1IN#0/TIM0_CC0#3/US1_RX#1 (io), 48 PD2/ADC0_CH2/DBG_SWO#3/EBI_A27#0,1,2/TIM0_CC1#3/US1_CLK#1/USB_DMPU (io), 49 PD3/ADC0_CH3/DAC0_N2/OPAMP_N2/ETM_TD1#0,2/TIM0_CC2#3/US1_CS#1 (io), 50 PD4/ADC0_CH4/DAC0_P2/OPAMP_P2/ETM_TD2#0,2/LEU0_TX#0 (io), 51 PD5/ADC0_CH5/DAC0_OUT2/OPAMP_OUT2#0/ETM_TD3#0,2/LEU0_RX#0 (io), 52 PD6/ACMP0_O#2/ADC0_CH6/DAC0_P1/OPAMP_P1/ETM_TD0#0/I2C0_SDA#1/LES_ALTEX0/LETIM0_OUT0#0/PCNT0_S0IN#3/TIM1_CC0#4/US1_RX#2 (io), 53 PD7/ACMP1_O#2/ADC0_CH7/CMU_CLK0#2/DAC0_N1/OPAMP_N1/ETM_TCLK#0/I2C0_SCL#1/LES_ALTEX1/LETIM0_OUT1#0/PCNT0_S1IN#3/TIM1_CC1#4/US1_TX#2 (io), 54 PD8/BU_VIN/CMU_CLK1#1 (io), 88 PD9/EBI_CS0#0,1,2 (io), 89 PD10/EBI_CS1#0,1,2 (io), 90 PD11/EBI_CS2#0,1,2 (io), 91 PD12/EBI_CS3#0,1,2 (io)
part E pins: 60 PE0/EBI_A07#0,1,2/I2C1_SDA#2/PCNT0_S0IN#1/TIM3_CC0#1/U0_TX#1 (io), 61 PE1/EBI_A08#0,1,2/I2C1_SCL#2/PCNT0_S1IN#1/TIM3_CC1#1/U0_RX#1 (io), 62 PE2/ACMP0_O#1/BU_VOUT/EBI_A09#0/TIM3_CC2#1/U1_TX#3 (io), 63 PE3/ACMP1_O#1/BU_STAT/EBI_A10#0/U1_RX#3 (io), 64 PE4/EBI_A11#0,1,2/US0_CS#1 (io), 65 PE5/EBI_A12#0,1,2/US0_CLK#1 (io), 66 PE6/EBI_A13#0,1,2/US0_RX#1 (io), 67 PE7/EBI_A14#0,1,2/US0_TX#1 (io), 92 PE8/EBI_AD00#0,1,2/PCNT2_S0IN#1/PRS_CH3#1 (io), 93 PE9/EBI_AD01#0,1,2/PCNT2_S1IN#1 (io), 94 PE10/BOOTLOADER_TX/EBI_AD02#0,1,2/TIM1_CC0#1/US0_TX#0 (io), 95 PE11/BOOTLOADER_RX/EBI_AD03#0,1,2/LES_ALTEX5/TIM1_CC1#1/US0_RX#0 (io), 96 PE12/CMU_CLK1#2/EBI_AD04#0,1,2/I2C0_SDA#6/LES_ALTEX6/TIM1_CC2#1/US0_CLK#0/US0_RX#3 (io), 97 PE13/ACMP0_O#0/EBI_AD05#0,1,2/GPIO_EM4WU5/I2C0_SCL#6/LES_ALTEX7/US0_CS#0/US0_TX#3 (io), 98 PE14/EBI_AD06#0,1,2/LEU0_TX#2/TIM3_CC0#0 (io), 99 PE15/EBI_AD07#0,1,2/LEU0_RX#2/TIM3_CC1#0 (io)
part F pins: 74 PF10/U1_TX#1/USB_DM (io), 75 PF11/U1_RX#1/USB_DP (io), 76 PF0/DBG_SWCLK#0,1,2,3/I2C0_SDA#5/LETIM0_OUT0#2/LEU0_TX#3/TIM0_CC0#5/US1_CLK#2 (io), 77 PF1/DBG_SWDIO#0,1,2,3/GPIO_EM4WU3/I2C0_SCL#5/LETIM0_OUT1#2/LEU0_RX#3/TIM0_CC1#5/US1_CS#2 (io), 78 PF2/ACMP1_O#0/DBG_SWO#0/EBI_ARDY#0,1,2/GPIO_EM4WU4/LEU0_TX#4/TIM0_CC2#5 (io), 80 PF12/USB_ID (io), 81 PF5/EBI_REN#0,2/PRS_CH2#1/TIM0_CDTI2#2,5/USB_VBUSEN (io), 84 PF6/EBI_BL0#0,1,2/TIM0_CC0#2/U0_TX#0 (io), 85 PF7/EBI_BL1#0,1,2/TIM0_CC1#2/U0_RX#0 (io), 86 PF8/EBI_WEN#1/ETM_TCLK#1/TIM0_CC2#2 (io), 87 PF9/EBI_REN#1/ETM_TD0#1 (io)
part G pins: 8 IOVDD_0 (power), 16 VSS@1 (power), 17 IOVDD_1 (power), 31 IOVDD_2 (power), 32 VSS@2 (power), 36 RESETN, 41 AVDD_1 (power), 44 IOVDD_3 (power), 45 AVDD_0 (power), 57 VDD_DREG (power), 58 VSS@3 (power), 59 DECOUPLE (power), 72 USB_VREGI (power), 73 USB_VREGO (power), 79 USB_VBUS (power), 82 IOVDD_5 (power), 83 VSS@4 (power)

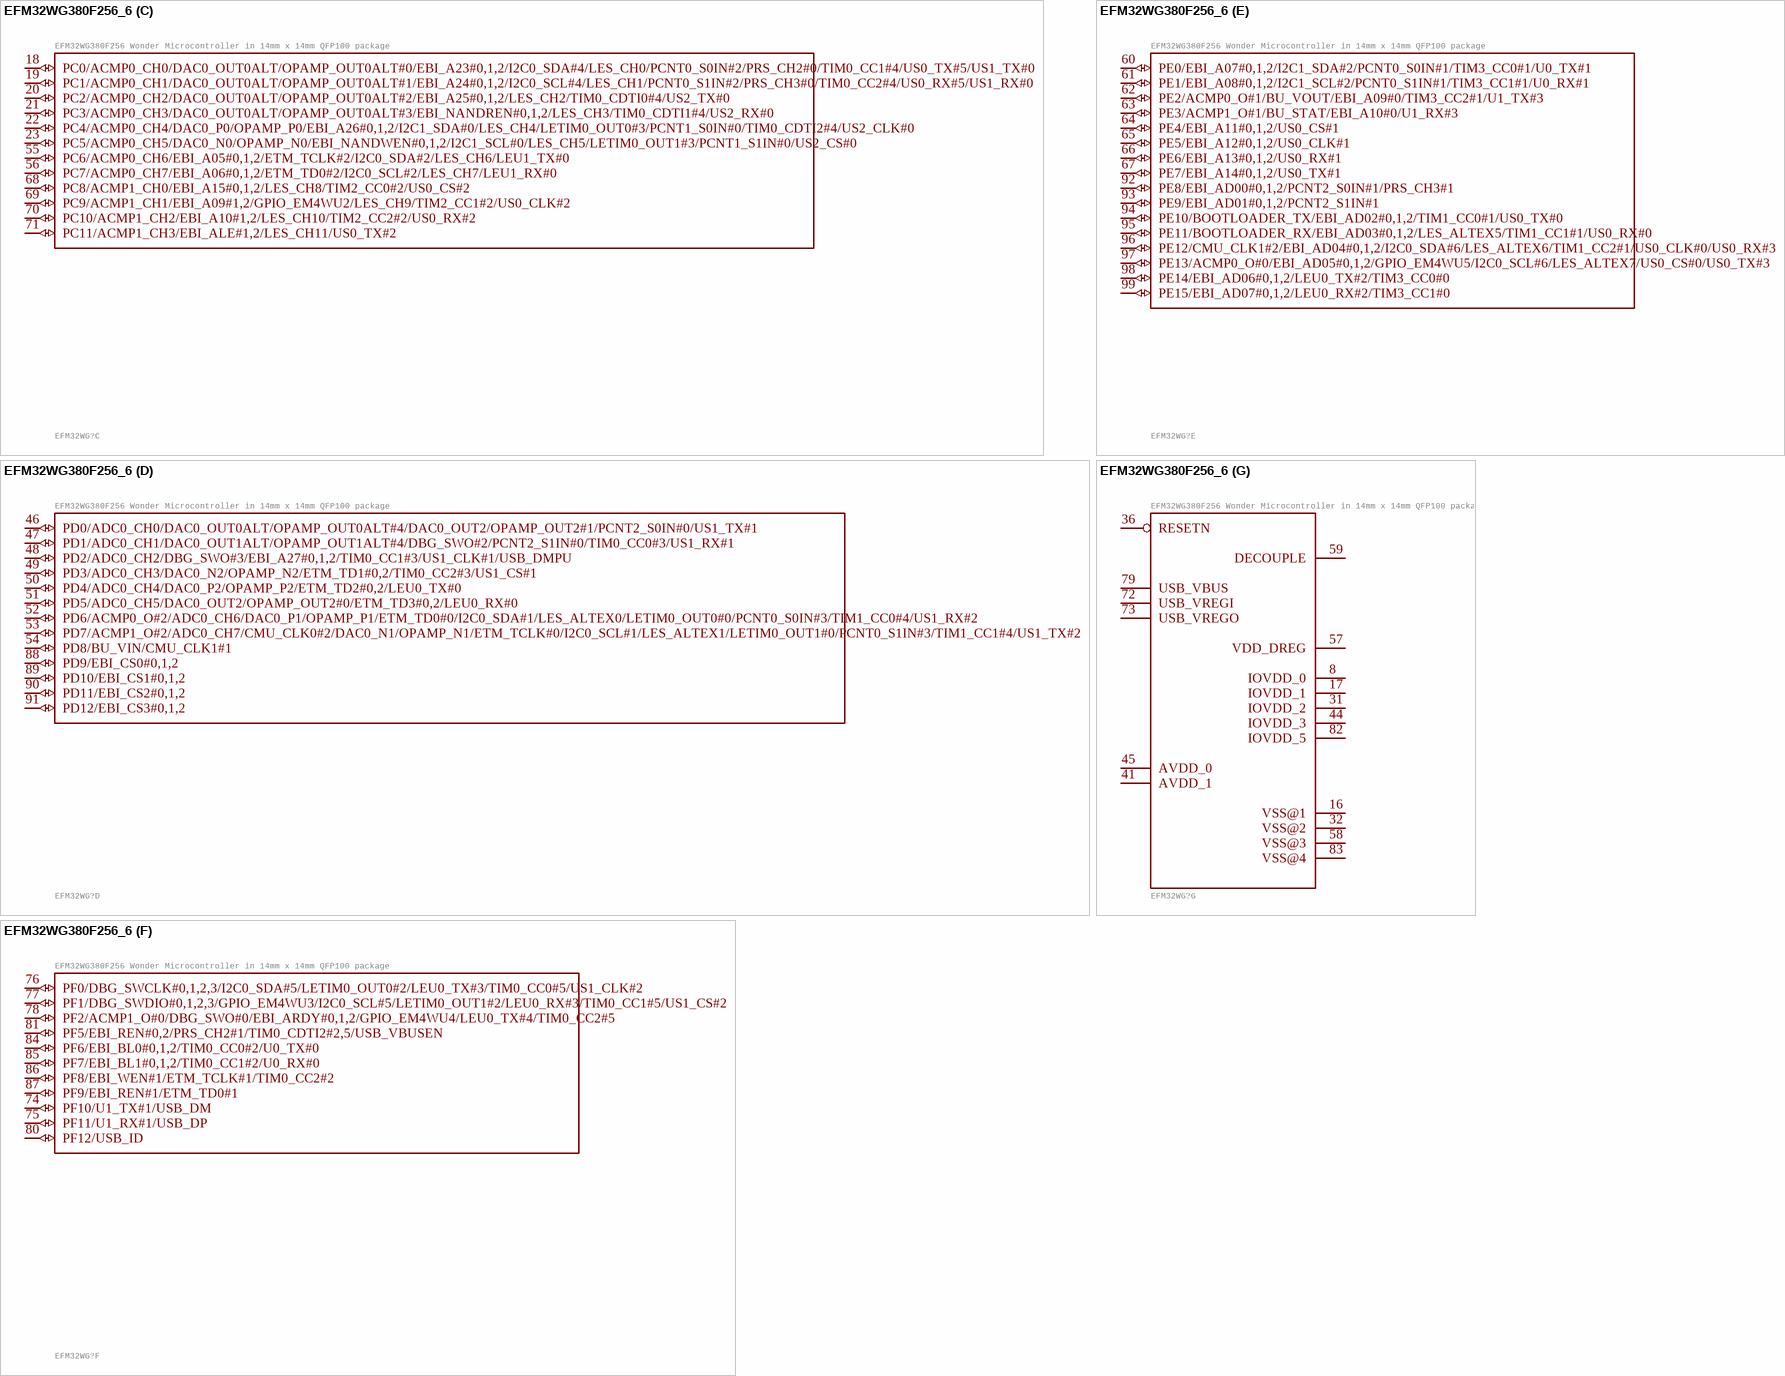
[diagram p10: symbol EFM32WG380F256_6]

## EFM32WG380F256_6
designator EFM32WG?, comment EFM32WG380F256 Wonder Microcontroller in 14mm x 14mm QFP100 package
GateName_1: A; SymbolName_1: EFM32WG380F256_A; GateName_2: B; SymbolName_2: EFM32WG380F256_B; GateName_3: C; SymbolName_3: EFM32WG380F256_C; GateName_4: D; SymbolName_4: EFM32WG380F256_D; GateName_5: E; SymbolName_5: EFM32WG380F256_E; GateName_6: F; SymbolName_6: EFM32WG380F256_F; GateName_7: PWR; SymbolName_7: EFM32WG380F256_PWR; LibraryName: AudioMoth 1.1.0; DeviceSetName: EFM32WG380F256; Package: QFP100
footprint QFP100
part A pins: 1 PA0/EBI_AD09#0,1,2/GPIO_EM4WU0/I2C0_SDA#0/LEU0_RX#4/PRS_CH0/TIM0_CC0#0,1,4 (io), 2 PA1/CMU_CLK1#0/EBI_AD10#0,1,2/I2C0_SCL#0/PRS_CH1/TIM0_CC1#0,1 (io), 3 PA2/CMU_CLK0#0/EBI_AD11#0,1,2/ETM_TD0#3/TIM0_CC2#0,1 (io), 4 PA3/EBI_AD12#0,1,2/ETM_TD1#3/LES_ALTEX2/TIM0_CDTI0#0/U0_TX#2 (io), 5 PA4/EBI_AD13#0,1,2/ETM_TD2#3/LES_ALTEX3/TIM0_CDTI1#0/U0_RX#2 (io), 6 PA5/EBI_AD14#0,1,2/ETM_TD3#3/LES_ALTEX4/LEU1_TX#1/TIM0_CDTI2#0 (io), 7 PA6/EBI_AD15#0,1,2/ETM_TCLK#3/GPIO_EM4WU1/LEU1_RX#1 (io), 26 PA7/EBI_CSTFT#0,1,2 (io), 27 PA8/EBI_DCLK#0,1,2/TIM2_CC0#0 (io), 28 PA9/EBI_DTEN#0,1,2/TIM2_CC1#0 (io), 29 PA10/EBI_VSNC#0,1,2/TIM2_CC2#0 (io), 30 PA11/EBI_HSNC#0,1,2 (io), 33 PA12/EBI_A00#0,1,2/TIM2_CC0#1 (io), 34 PA13/EBI_A01#0,1,2/TIM2_CC1#1 (io), 35 PA14/EBI_A02#0,1,2/TIM2_CC2#1 (io), 100 PA15/EBI_AD08#0,1,2/TIM3_CC2#0 (io)
part B pins: 9 PB0/EBI_A16#0,1,2/TIM1_CC0#2 (io), 10 PB1/EBI_A17#0,1,2/TIM1_CC1#2 (io), 11 PB2/EBI_A18#0,1,2/TIM1_CC2#2 (io), 12 PB3/EBI_A19#0,1,2/PCNT1_S0IN#1/US2_TX#1 (io), 13 PB4/EBI_A20#0,1,2/PCNT1_S1IN#1/US2_RX#1 (io), 14 PB5/EBI_A21#0,1,2/US2_CLK#1 (io), 15 PB6/EBI_A22#0,1,2/US2_CS#1 (io), 24 PB7/LFXTAL_P/TIM1_CC0#3/US0_TX#4/US1_CLK#0 (io), 25 PB8/LFXTAL_N/TIM1_CC1#3/US0_RX#4/US1_CS#0 (io), 37 PB9/EBI_A03#0,1,2/U1_TX#2 (io), 38 PB10/EBI_A04#0,1,2/U1_RX#2 (io), 39 PB11/DAC0_OUT0/OPAMP_OUT0/I2C1_SDA#1/LETIM0_OUT0#1/TIM1_CC2#3 (io), 40 PB12/DAC0_OUT1/OPAMP_OUT1/I2C1_SCL#1/LETIM0_OUT1#1 (io), 42 PB13/HFXTAL_P/LEU0_TX#1/US0_CLK#4,5 (io), 43 PB14/HFXTAL_N/LEU0_RX#1/US0_CS#4,5 (io)
part C pins: 18 PC0/ACMP0_CH0/DAC0_OUT0ALT/OPAMP_OUT0ALT#0/EBI_A23#0,1,2/I2C0_SDA#4/LES_CH0/PCNT0_S0IN#2/PRS_CH2#0/TIM0_CC1#4/US0_TX#5/US1_TX#0 (io), 19 PC1/ACMP0_CH1/DAC0_OUT0ALT/OPAMP_OUT0ALT#1/EBI_A24#0,1,2/I2C0_SCL#4/LES_CH1/PCNT0_S1IN#2/PRS_CH3#0/TIM0_CC2#4/US0_RX#5/US1_RX#0 (io), 20 PC2/ACMP0_CH2/DAC0_OUT0ALT/OPAMP_OUT0ALT#2/EBI_A25#0,1,2/LES_CH2/TIM0_CDTI0#4/US2_TX#0 (io), 21 PC3/ACMP0_CH3/DAC0_OUT0ALT/OPAMP_OUT0ALT#3/EBI_NANDREN#0,1,2/LES_CH3/TIM0_CDTI1#4/US2_RX#0 (io), 22 PC4/ACMP0_CH4/DAC0_P0/OPAMP_P0/EBI_A26#0,1,2/I2C1_SDA#0/LES_CH4/LETIM0_OUT0#3/PCNT1_S0IN#0/TIM0_CDTI2#4/US2_CLK#0 (io), 23 PC5/ACMP0_CH5/DAC0_N0/OPAMP_N0/EBI_NANDWEN#0,1,2/I2C1_SCL#0/LES_CH5/LETIM0_OUT1#3/PCNT1_S1IN#0/US2_CS#0 (io), 55 PC6/ACMP0_CH6/EBI_A05#0,1,2/ETM_TCLK#2/I2C0_SDA#2/LES_CH6/LEU1_TX#0 (io), 56 PC7/ACMP0_CH7/EBI_A06#0,1,2/ETM_TD0#2/I2C0_SCL#2/LES_CH7/LEU1_RX#0 (io), 68 PC8/ACMP1_CH0/EBI_A15#0,1,2/LES_CH8/TIM2_CC0#2/US0_CS#2 (io), 69 PC9/ACMP1_CH1/EBI_A09#1,2/GPIO_EM4WU2/LES_CH9/TIM2_CC1#2/US0_CLK#2 (io), 70 PC10/ACMP1_CH2/EBI_A10#1,2/LES_CH10/TIM2_CC2#2/US0_RX#2 (io), 71 PC11/ACMP1_CH3/EBI_ALE#1,2/LES_CH11/US0_TX#2 (io)
part D pins: 46 PD0/ADC0_CH0/DAC0_OUT0ALT/OPAMP_OUT0ALT#4/DAC0_OUT2/OPAMP_OUT2#1/PCNT2_S0IN#0/US1_TX#1 (io), 47 PD1/ADC0_CH1/DAC0_OUT1ALT/OPAMP_OUT1ALT#4/DBG_SWO#2/PCNT2_S1IN#0/TIM0_CC0#3/US1_RX#1 (io), 48 PD2/ADC0_CH2/DBG_SWO#3/EBI_A27#0,1,2/TIM0_CC1#3/US1_CLK#1/USB_DMPU (io), 49 PD3/ADC0_CH3/DAC0_N2/OPAMP_N2/ETM_TD1#0,2/TIM0_CC2#3/US1_CS#1 (io), 50 PD4/ADC0_CH4/DAC0_P2/OPAMP_P2/ETM_TD2#0,2/LEU0_TX#0 (io), 51 PD5/ADC0_CH5/DAC0_OUT2/OPAMP_OUT2#0/ETM_TD3#0,2/LEU0_RX#0 (io), 52 PD6/ACMP0_O#2/ADC0_CH6/DAC0_P1/OPAMP_P1/ETM_TD0#0/I2C0_SDA#1/LES_ALTEX0/LETIM0_OUT0#0/PCNT0_S0IN#3/TIM1_CC0#4/US1_RX#2 (io), 53 PD7/ACMP1_O#2/ADC0_CH7/CMU_CLK0#2/DAC0_N1/OPAMP_N1/ETM_TCLK#0/I2C0_SCL#1/LES_ALTEX1/LETIM0_OUT1#0/PCNT0_S1IN#3/TIM1_CC1#4/US1_TX#2 (io), 54 PD8/BU_VIN/CMU_CLK1#1 (io), 88 PD9/EBI_CS0#0,1,2 (io), 89 PD10/EBI_CS1#0,1,2 (io), 90 PD11/EBI_CS2#0,1,2 (io), 91 PD12/EBI_CS3#0,1,2 (io)
part E pins: 60 PE0/EBI_A07#0,1,2/I2C1_SDA#2/PCNT0_S0IN#1/TIM3_CC0#1/U0_TX#1 (io), 61 PE1/EBI_A08#0,1,2/I2C1_SCL#2/PCNT0_S1IN#1/TIM3_CC1#1/U0_RX#1 (io), 62 PE2/ACMP0_O#1/BU_VOUT/EBI_A09#0/TIM3_CC2#1/U1_TX#3 (io), 63 PE3/ACMP1_O#1/BU_STAT/EBI_A10#0/U1_RX#3 (io), 64 PE4/EBI_A11#0,1,2/US0_CS#1 (io), 65 PE5/EBI_A12#0,1,2/US0_CLK#1 (io), 66 PE6/EBI_A13#0,1,2/US0_RX#1 (io), 67 PE7/EBI_A14#0,1,2/US0_TX#1 (io), 92 PE8/EBI_AD00#0,1,2/PCNT2_S0IN#1/PRS_CH3#1 (io), 93 PE9/EBI_AD01#0,1,2/PCNT2_S1IN#1 (io), 94 PE10/BOOTLOADER_TX/EBI_AD02#0,1,2/TIM1_CC0#1/US0_TX#0 (io), 95 PE11/BOOTLOADER_RX/EBI_AD03#0,1,2/LES_ALTEX5/TIM1_CC1#1/US0_RX#0 (io), 96 PE12/CMU_CLK1#2/EBI_AD04#0,1,2/I2C0_SDA#6/LES_ALTEX6/TIM1_CC2#1/US0_CLK#0/US0_RX#3 (io), 97 PE13/ACMP0_O#0/EBI_AD05#0,1,2/GPIO_EM4WU5/I2C0_SCL#6/LES_ALTEX7/US0_CS#0/US0_TX#3 (io), 98 PE14/EBI_AD06#0,1,2/LEU0_TX#2/TIM3_CC0#0 (io), 99 PE15/EBI_AD07#0,1,2/LEU0_RX#2/TIM3_CC1#0 (io)
part F pins: 74 PF10/U1_TX#1/USB_DM (io), 75 PF11/U1_RX#1/USB_DP (io), 76 PF0/DBG_SWCLK#0,1,2,3/I2C0_SDA#5/LETIM0_OUT0#2/LEU0_TX#3/TIM0_CC0#5/US1_CLK#2 (io), 77 PF1/DBG_SWDIO#0,1,2,3/GPIO_EM4WU3/I2C0_SCL#5/LETIM0_OUT1#2/LEU0_RX#3/TIM0_CC1#5/US1_CS#2 (io), 78 PF2/ACMP1_O#0/DBG_SWO#0/EBI_ARDY#0,1,2/GPIO_EM4WU4/LEU0_TX#4/TIM0_CC2#5 (io), 80 PF12/USB_ID (io), 81 PF5/EBI_REN#0,2/PRS_CH2#1/TIM0_CDTI2#2,5/USB_VBUSEN (io), 84 PF6/EBI_BL0#0,1,2/TIM0_CC0#2/U0_TX#0 (io), 85 PF7/EBI_BL1#0,1,2/TIM0_CC1#2/U0_RX#0 (io), 86 PF8/EBI_WEN#1/ETM_TCLK#1/TIM0_CC2#2 (io), 87 PF9/EBI_REN#1/ETM_TD0#1 (io)
part G pins: 8 IOVDD_0 (power), 16 VSS@1 (power), 17 IOVDD_1 (power), 31 IOVDD_2 (power), 32 VSS@2 (power), 36 RESETN, 41 AVDD_1 (power), 44 IOVDD_3 (power), 45 AVDD_0 (power), 57 VDD_DREG (power), 58 VSS@3 (power), 59 DECOUPLE (power), 72 USB_VREGI (power), 73 USB_VREGO (power), 79 USB_VBUS (power), 82 IOVDD_5 (power), 83 VSS@4 (power)

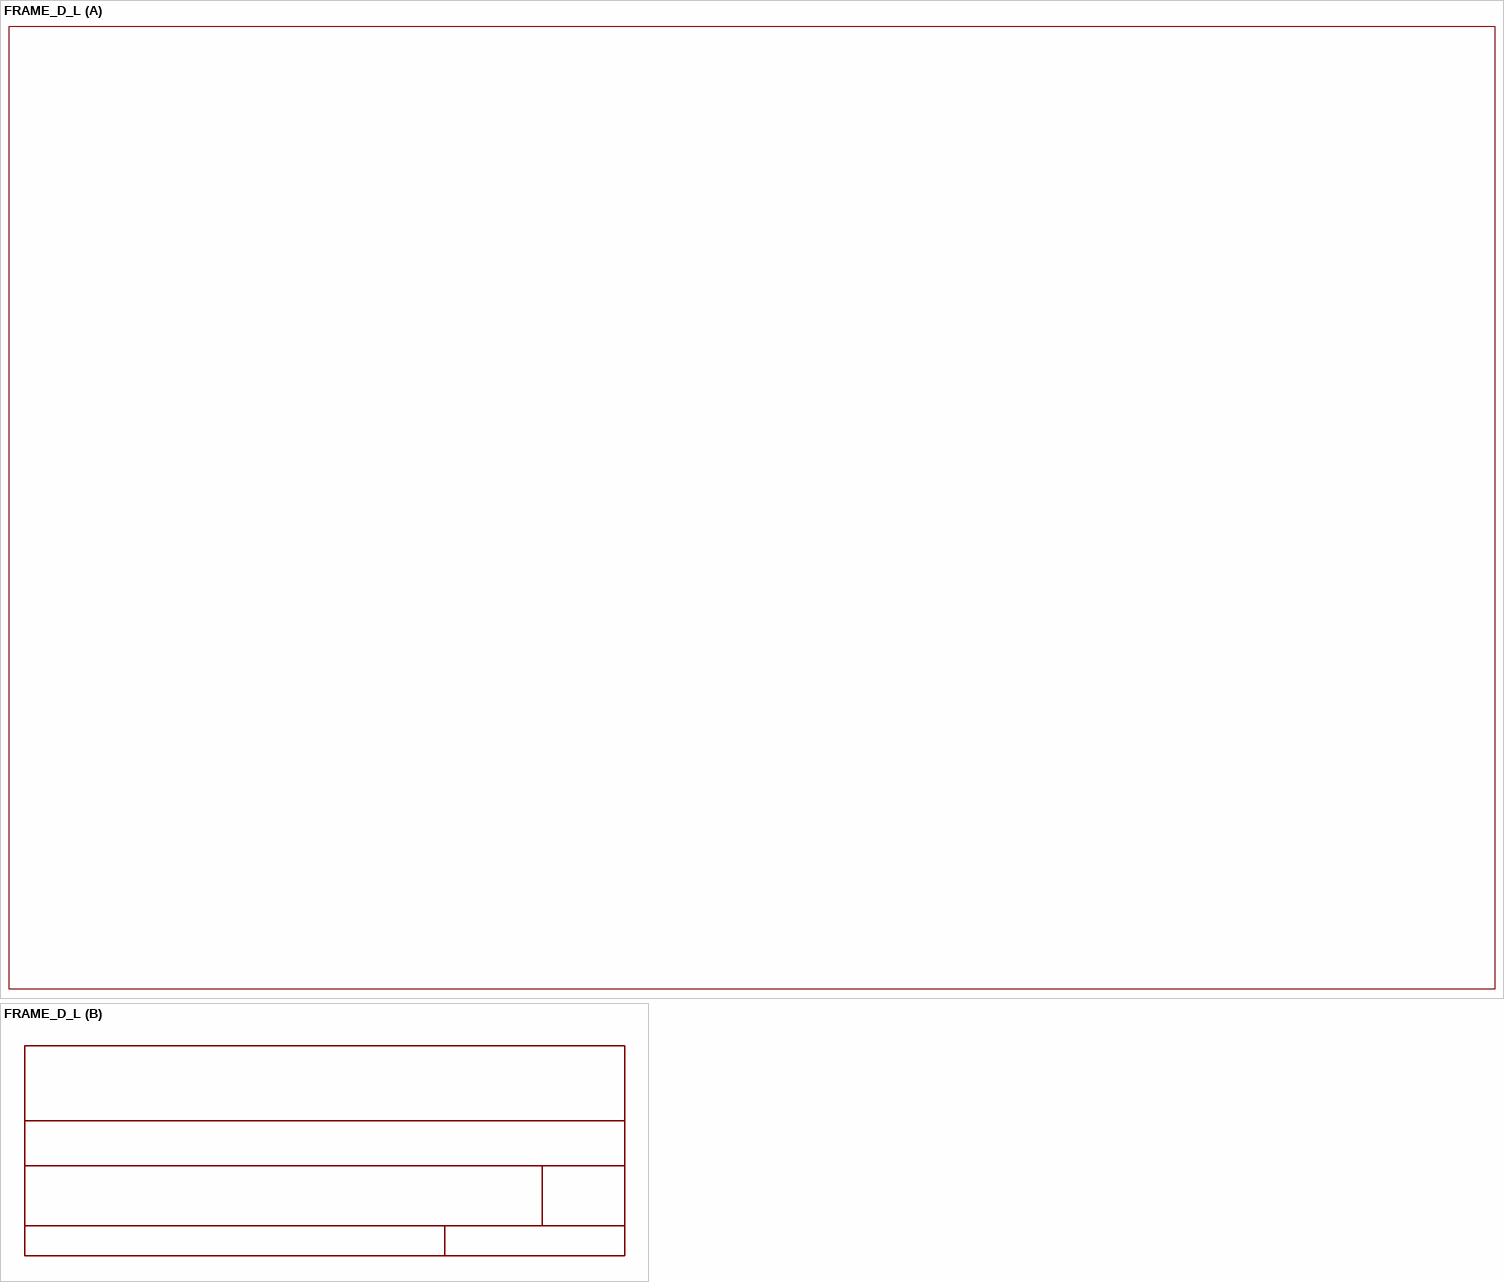
[diagram p11: symbol FRAME_D_L]

## FRAME_D_L
designator FRAME?, comment FRAME D Size , 22 x 34 INCH, Landscape  (value not drawn)
GateName_1: G$1; SymbolName_1: FRAME_D_L; GateName_2: G$2; SymbolName_2: DOCFIELD; LibraryName: AudioMoth 1.1.0; DeviceSetName: FRAME_D_L

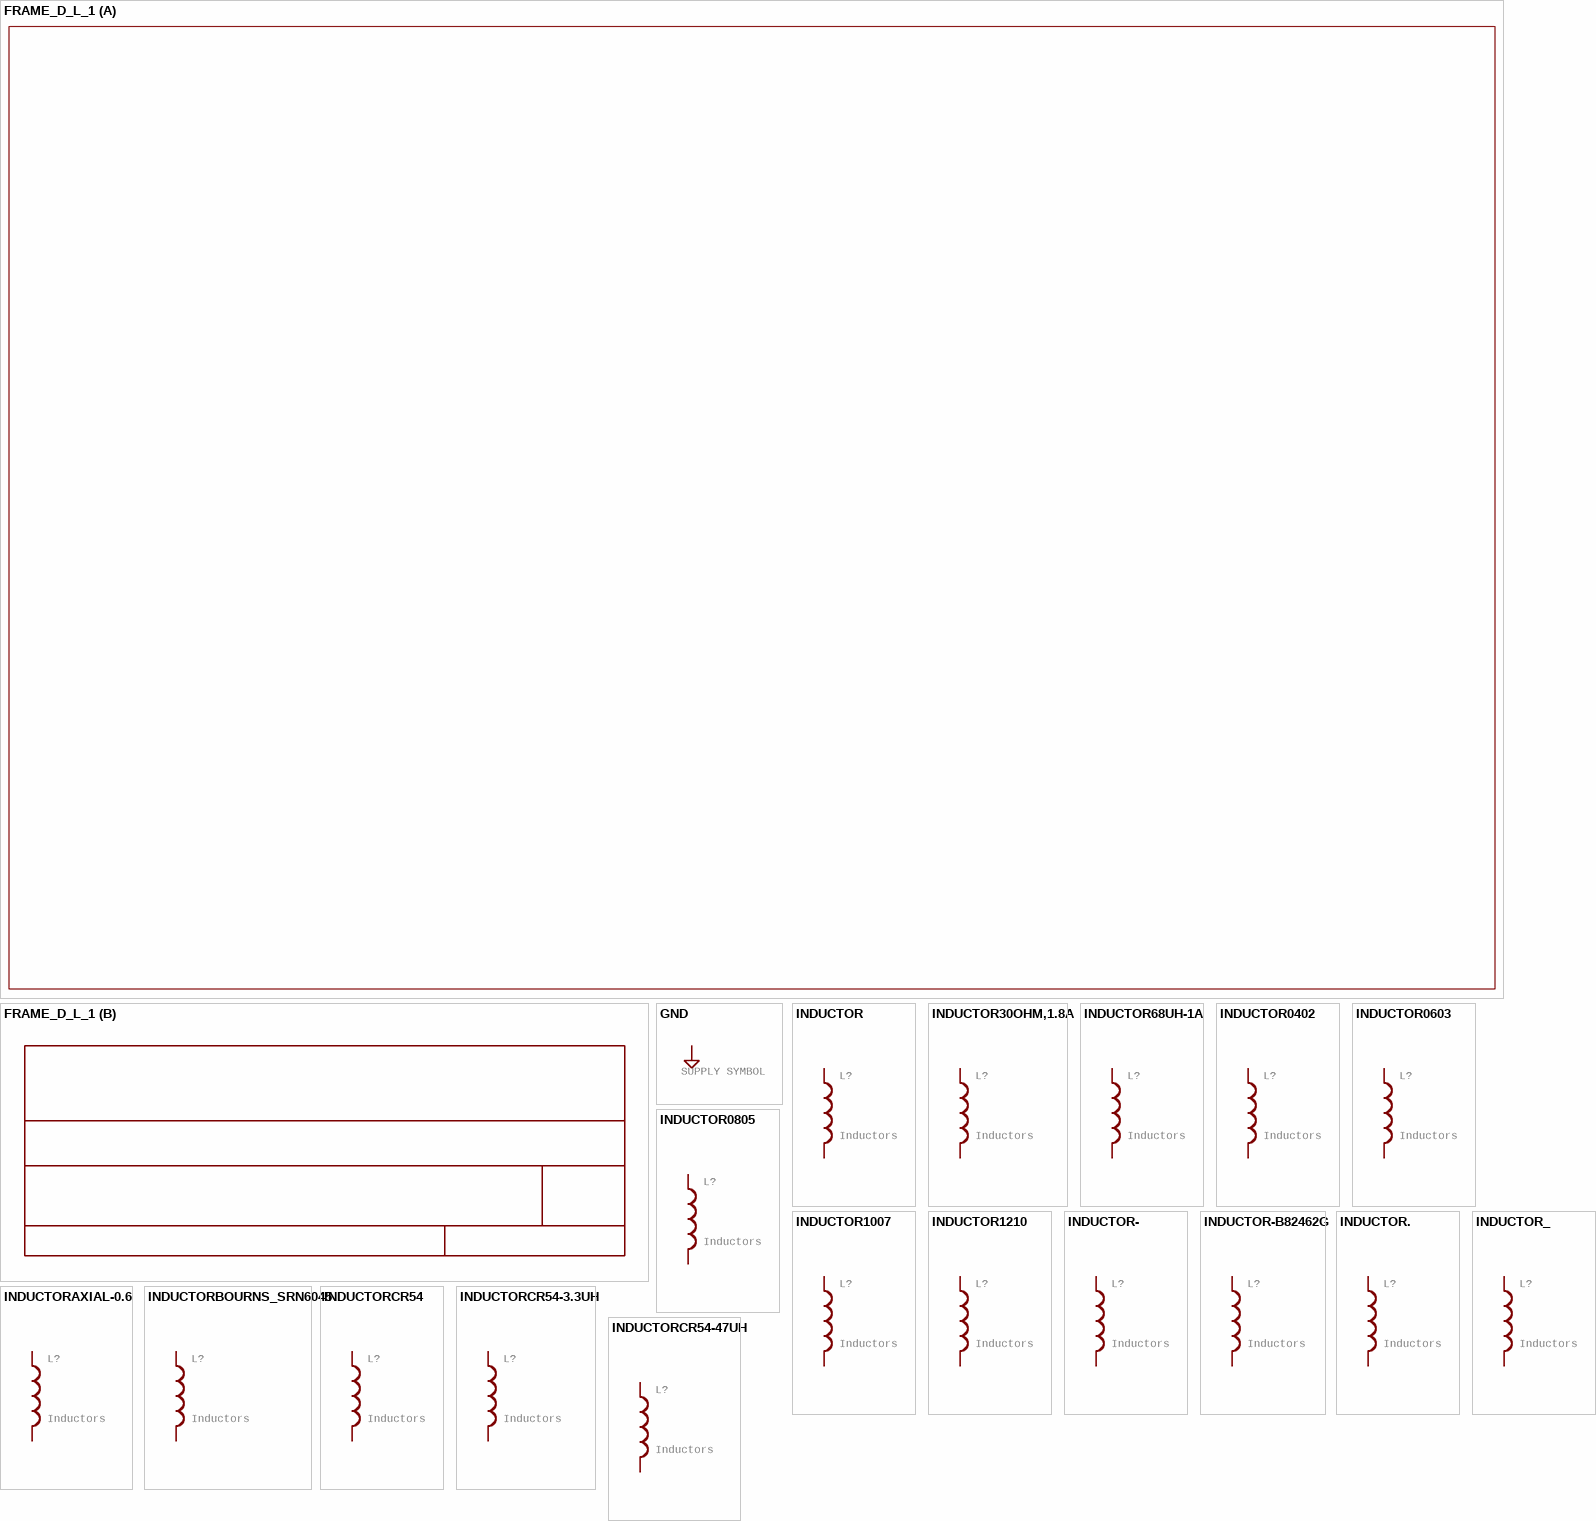
[diagram p12: symbols FRAME_D_L_1 to INDUCTORCR54-47UH]

## FRAME_D_L_1
designator FRAME?, comment FRAME D Size , 22 x 34 INCH, Landscape  (value not drawn)
GateName_1: G$1; SymbolName_1: FRAME_D_L; GateName_2: G$2; SymbolName_2: DOCFIELD; LibraryName: AudioMoth 1.1.0; DeviceSetName: FRAME_D_L

## GND
designator SUPPLY?, comment SUPPLY SYMBOL
GateName_1: GND; SymbolName_1: GND; LibraryName: AudioMoth 1.1.0; DeviceSetName: GND
pins: ?1 GND (power)

## INDUCTOR
designator L?, comment Inductors   Basic Inductor/Choke - 0603 and 1206. Footprints are not proven and vary greatly between part numbers. INDUCTOR POWER 3.3UH 4.0A SMD 0.197" L x 0.197" W x 0.177" H (5.00mm x 5.00mm x 4.50mm)
GateName_1: G$1; SymbolName_1: INDUCTOR; LibraryName: AudioMoth 1.1.0; DeviceSetName: INDUCTOR; Package: INDUCTOR-SRP4020
footprint INDUCTOR-SRP4020
pins: P$1 1, P$2 2

## INDUCTOR30OHM,1.8A
designator L?, comment Inductors   Basic Inductor/Choke - 0603 and 1206. Footprints are not proven and vary greatly between part numbers. INDUCTOR POWER 3.3UH 4.0A SMD 0.197" L x 0.197" W x 0.177" H (5.00mm x 5.00mm x 4.50mm)
GateName_1: G$1; DeviceName: 30OHM,1.8A; PROD_ID: RES-07859; SymbolName_1: INDUCTOR; LibraryName: AudioMoth 1.1.0; DeviceSetName: INDUCTOR; Package: 0603
footprint 0603
pins: 1, 2

## INDUCTOR68UH-1A
designator L?, comment Inductors   Basic Inductor/Choke - 0603 and 1206. Footprints are not proven and vary greatly between part numbers. INDUCTOR POWER 3.3UH 4.0A SMD 0.197" L x 0.197" W x 0.177" H (5.00mm x 5.00mm x 4.50mm)
GateName_1: G$1; DeviceName: 68UH-1A; PROD_ID: NDUC-09739; SymbolName_1: INDUCTOR; LibraryName: AudioMoth 1.1.0; DeviceSetName: INDUCTOR; Package: CR75
footprint CR75
pins: P$1 1, P$2 2

## INDUCTOR0402
designator L?, comment Inductors   Basic Inductor/Choke - 0603 and 1206. Footprints are not proven and vary greatly between part numbers. INDUCTOR POWER 3.3UH 4.0A SMD 0.197" L x 0.197" W x 0.177" H (5.00mm x 5.00mm x 4.50mm)
GateName_1: G$1; DeviceName: 0402; SymbolName_1: INDUCTOR; LibraryName: AudioMoth 1.1.0; DeviceSetName: INDUCTOR; Package: C0402
footprint C0402
pins: 1, 2

## INDUCTOR0603
designator L?, comment Inductors   Basic Inductor/Choke - 0603 and 1206. Footprints are not proven and vary greatly between part numbers. INDUCTOR POWER 3.3UH 4.0A SMD 0.197" L x 0.197" W x 0.177" H (5.00mm x 5.00mm x 4.50mm)
GateName_1: G$1; DeviceName: 0603; SymbolName_1: INDUCTOR; LibraryName: AudioMoth 1.1.0; DeviceSetName: INDUCTOR; Package: 0603
footprint 0603
pins: 1, 2

## INDUCTOR0805
designator L?, comment Inductors   Basic Inductor/Choke - 0603 and 1206. Footprints are not proven and vary greatly between part numbers. INDUCTOR POWER 3.3UH 4.0A SMD 0.197" L x 0.197" W x 0.177" H (5.00mm x 5.00mm x 4.50mm)
GateName_1: G$1; DeviceName: 0805; SymbolName_1: INDUCTOR; LibraryName: AudioMoth 1.1.0; DeviceSetName: INDUCTOR; Package: 0805
footprint 0805
pins: 1, 2

## INDUCTOR1007
designator L?, comment Inductors   Basic Inductor/Choke - 0603 and 1206. Footprints are not proven and vary greatly between part numbers. INDUCTOR POWER 3.3UH 4.0A SMD 0.197" L x 0.197" W x 0.177" H (5.00mm x 5.00mm x 4.50mm)
GateName_1: G$1; DeviceName: 1007; SymbolName_1: INDUCTOR; LibraryName: AudioMoth 1.1.0; DeviceSetName: INDUCTOR; Package: 1007
footprint 1007
pins: 1, 2

## INDUCTOR1210
designator L?, comment Inductors   Basic Inductor/Choke - 0603 and 1206. Footprints are not proven and vary greatly between part numbers. INDUCTOR POWER 3.3UH 4.0A SMD 0.197" L x 0.197" W x 0.177" H (5.00mm x 5.00mm x 4.50mm)
GateName_1: G$1; DeviceName: 1210; SymbolName_1: INDUCTOR; LibraryName: AudioMoth 1.1.0; DeviceSetName: INDUCTOR; Package: 1210
footprint 1210
pins: 1, 2

## INDUCTOR-
designator L?, comment Inductors   Basic Inductor/Choke - 0603 and 1206. Footprints are not proven and vary greatly between part numbers. INDUCTOR POWER 3.3UH 4.0A SMD 0.197" L x 0.197" W x 0.177" H (5.00mm x 5.00mm x 4.50mm)
GateName_1: G$1; SymbolName_1: INDUCTOR; DeviceName: -; LibraryName: AudioMoth 1.1.0; DeviceSetName: INDUCTOR; Package: CDRH3D28
footprint CDRH3D28
pins: 1, 2

## INDUCTOR-B82462G
designator L?, comment Inductors   Basic Inductor/Choke - 0603 and 1206. Footprints are not proven and vary greatly between part numbers. INDUCTOR POWER 3.3UH 4.0A SMD 0.197" L x 0.197" W x 0.177" H (5.00mm x 5.00mm x 4.50mm)
GateName_1: G$1; DeviceName: -B82462G; SymbolName_1: INDUCTOR; LibraryName: AudioMoth 1.1.0; DeviceSetName: INDUCTOR; Package: B82462G
footprint B82462G
pins: P$1 1, P$2 2

## INDUCTOR.
designator L?, comment Inductors   Basic Inductor/Choke - 0603 and 1206. Footprints are not proven and vary greatly between part numbers. INDUCTOR POWER 3.3UH 4.0A SMD 0.197" L x 0.197" W x 0.177" H (5.00mm x 5.00mm x 4.50mm)
GateName_1: G$1; DeviceName: .; SymbolName_1: INDUCTOR; LibraryName: AudioMoth 1.1.0; DeviceSetName: INDUCTOR; Package: CDRH2D09
footprint CDRH2D09
pins: P$1 1, P$2 2

## INDUCTOR_
designator L?, comment Inductors   Basic Inductor/Choke - 0603 and 1206. Footprints are not proven and vary greatly between part numbers. INDUCTOR POWER 3.3UH 4.0A SMD 0.197" L x 0.197" W x 0.177" H (5.00mm x 5.00mm x 4.50mm)
GateName_1: G$1; DeviceName: _; SymbolName_1: INDUCTOR; LibraryName: AudioMoth 1.1.0; DeviceSetName: INDUCTOR; Package: COOPER_UP4B
footprint COOPER_UP4B
pins: 1, 2

## INDUCTORAXIAL-0.6
designator L?, comment Inductors   Basic Inductor/Choke - 0603 and 1206. Footprints are not proven and vary greatly between part numbers. INDUCTOR POWER 3.3UH 4.0A SMD 0.197" L x 0.197" W x 0.177" H (5.00mm x 5.00mm x 4.50mm)
GateName_1: G$1; DeviceName: AXIAL-0.6; SymbolName_1: INDUCTOR; LibraryName: AudioMoth 1.1.0; DeviceSetName: INDUCTOR; Package: AXIAL-0.6
footprint AXIAL-0.6
pins: P$1 1, P$2 2

## INDUCTORBOURNS_SRN6045
designator L?, comment Inductors   Basic Inductor/Choke - 0603 and 1206. Footprints are not proven and vary greatly between part numbers. INDUCTOR POWER 3.3UH 4.0A SMD 0.197" L x 0.197" W x 0.177" H (5.00mm x 5.00mm x 4.50mm)
GateName_1: G$1; DeviceName: BOURNS_SRN6045; PROD_ID: NDUC-11627; SymbolName_1: INDUCTOR; LibraryName: AudioMoth 1.1.0; DeviceSetName: INDUCTOR; Package: SRN6045
footprint SRN6045
pins: 1, 2

## INDUCTORCR54
designator L?, comment Inductors   Basic Inductor/Choke - 0603 and 1206. Footprints are not proven and vary greatly between part numbers. INDUCTOR POWER 3.3UH 4.0A SMD 0.197" L x 0.197" W x 0.177" H (5.00mm x 5.00mm x 4.50mm)
GateName_1: G$1; DeviceName: CR54; SymbolName_1: INDUCTOR; LibraryName: AudioMoth 1.1.0; DeviceSetName: INDUCTOR; Package: CR54
footprint CR54
pins: P$1 1, P$2 2

## INDUCTORCR54-3.3UH
designator L?, comment Inductors   Basic Inductor/Choke - 0603 and 1206. Footprints are not proven and vary greatly between part numbers. INDUCTOR POWER 3.3UH 4.0A SMD 0.197" L x 0.197" W x 0.177" H (5.00mm x 5.00mm x 4.50mm)
GateName_1: G$1; DeviceName: CR54-3.3UH; PROD_ID: NDUC-11157; SymbolName_1: INDUCTOR; LibraryName: AudioMoth 1.1.0; DeviceSetName: INDUCTOR; Package: CR54
footprint CR54
pins: P$1 1, P$2 2

## INDUCTORCR54-47UH
designator L?, comment Inductors   Basic Inductor/Choke - 0603 and 1206. Footprints are not proven and vary greatly between part numbers. INDUCTOR POWER 3.3UH 4.0A SMD 0.197" L x 0.197" W x 0.177" H (5.00mm x 5.00mm x 4.50mm)
GateName_1: G$1; DeviceName: CR54-47UH; PROD_ID: NDUC-10789; SymbolName_1: INDUCTOR; LibraryName: AudioMoth 1.1.0; DeviceSetName: INDUCTOR; Package: CR54
footprint CR54
pins: P$1 1, P$2 2

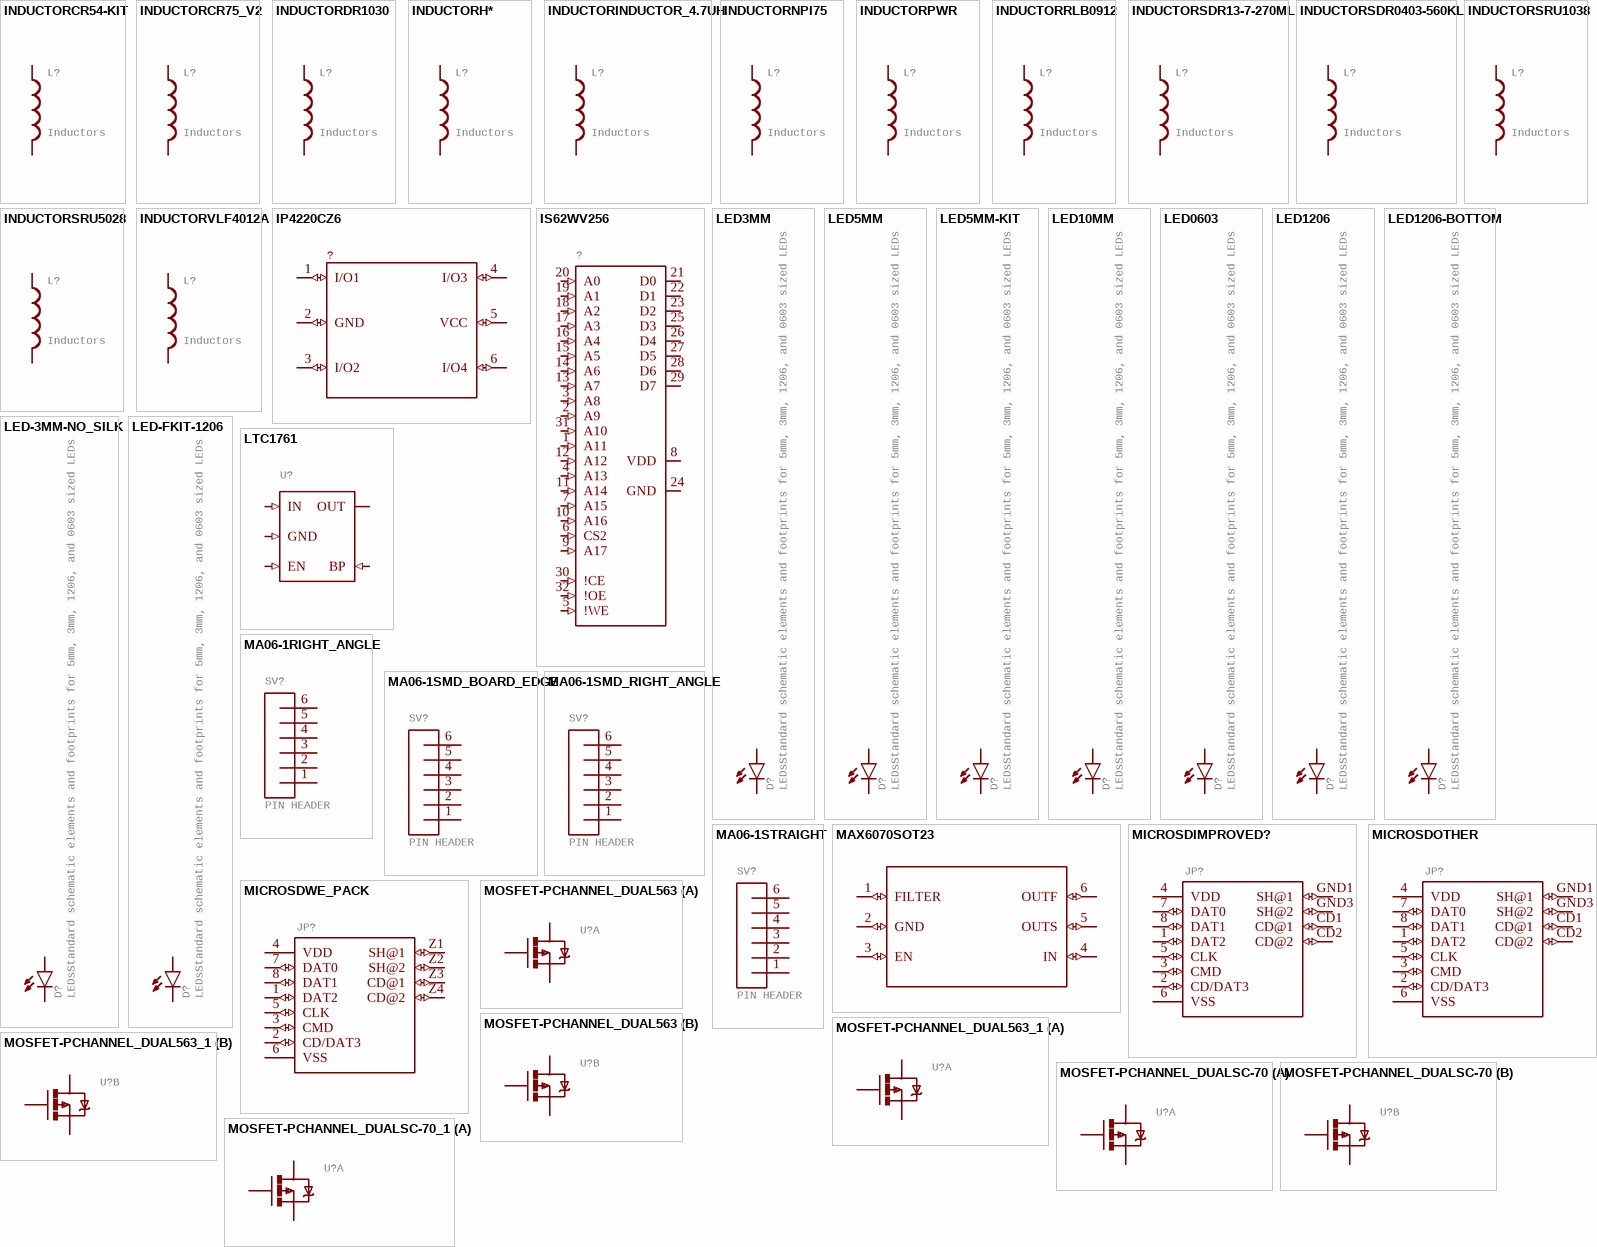
[diagram p13: symbols INDUCTORCR54-KIT to MOSFET-PCHANNEL_DUALSC-70_1]

## INDUCTORCR54-KIT
designator L?, comment Inductors   Basic Inductor/Choke - 0603 and 1206. Footprints are not proven and vary greatly between part numbers. INDUCTOR POWER 3.3UH 4.0A SMD 0.197" L x 0.197" W x 0.177" H (5.00mm x 5.00mm x 4.50mm)
GateName_1: G$1; DeviceName: CR54-KIT; SymbolName_1: INDUCTOR; LibraryName: AudioMoth 1.1.0; DeviceSetName: INDUCTOR; Package: CR54-KIT
footprint CR54-KIT
pins: P$1 1, P$2 2

## INDUCTORCR75_V2
designator L?, comment Inductors   Basic Inductor/Choke - 0603 and 1206. Footprints are not proven and vary greatly between part numbers. INDUCTOR POWER 3.3UH 4.0A SMD 0.197" L x 0.197" W x 0.177" H (5.00mm x 5.00mm x 4.50mm)
GateName_1: G$1; DeviceName: CR75_V2; SymbolName_1: INDUCTOR; LibraryName: AudioMoth 1.1.0; DeviceSetName: INDUCTOR; Package: CR75_V2
footprint CR75_V2
pins: P$1 1, P$2 2

## INDUCTORDR1030
designator L?, comment Inductors   Basic Inductor/Choke - 0603 and 1206. Footprints are not proven and vary greatly between part numbers. INDUCTOR POWER 3.3UH 4.0A SMD 0.197" L x 0.197" W x 0.177" H (5.00mm x 5.00mm x 4.50mm)
GateName_1: G$1; DeviceName: DR1030; SymbolName_1: INDUCTOR; LibraryName: AudioMoth 1.1.0; DeviceSetName: INDUCTOR; Package: DR1030
footprint DR1030
pins: 1, 2

## INDUCTORH*
designator L?, comment Inductors   Basic Inductor/Choke - 0603 and 1206. Footprints are not proven and vary greatly between part numbers. INDUCTOR POWER 3.3UH 4.0A SMD 0.197" L x 0.197" W x 0.177" H (5.00mm x 5.00mm x 4.50mm)
GateName_1: G$1; DeviceName: H*; SymbolName_1: INDUCTOR; LibraryName: AudioMoth 1.1.0; DeviceSetName: INDUCTOR; Package: INDUCTOR-1206
footprint INDUCTOR-1206
pins: P$1 1, P$2 2

## INDUCTORINDUCTOR_4.7UH
designator L?, comment Inductors   Basic Inductor/Choke - 0603 and 1206. Footprints are not proven and vary greatly between part numbers. INDUCTOR POWER 3.3UH 4.0A SMD 0.197" L x 0.197" W x 0.177" H (5.00mm x 5.00mm x 4.50mm)
GateName_1: G$1; DeviceName: INDUCTOR_4.7UH; PROD_ID: NDUC-10146; SymbolName_1: INDUCTOR; LibraryName: AudioMoth 1.1.0; DeviceSetName: INDUCTOR; Package: INDUCTOR_4.7UH
footprint INDUCTOR_4.7UH
pins: P$1 1, P$2 2

## INDUCTORNPI75
designator L?, comment Inductors   Basic Inductor/Choke - 0603 and 1206. Footprints are not proven and vary greatly between part numbers. INDUCTOR POWER 3.3UH 4.0A SMD 0.197" L x 0.197" W x 0.177" H (5.00mm x 5.00mm x 4.50mm)
GateName_1: G$1; DeviceName: NPI75; SymbolName_1: INDUCTOR; LibraryName: AudioMoth 1.1.0; DeviceSetName: INDUCTOR; Package: NPI75C
footprint NPI75C
pins: 1, 2

## INDUCTORPWR
designator L?, comment Inductors   Basic Inductor/Choke - 0603 and 1206. Footprints are not proven and vary greatly between part numbers. INDUCTOR POWER 3.3UH 4.0A SMD 0.197" L x 0.197" W x 0.177" H (5.00mm x 5.00mm x 4.50mm)
GateName_1: G$1; DeviceName: PWR; SymbolName_1: INDUCTOR; LibraryName: AudioMoth 1.1.0; DeviceSetName: INDUCTOR; Package: CDRH125
footprint CDRH125
pins: 1, 2

## INDUCTORRLB0912
designator L?, comment Inductors   Basic Inductor/Choke - 0603 and 1206. Footprints are not proven and vary greatly between part numbers. INDUCTOR POWER 3.3UH 4.0A SMD 0.197" L x 0.197" W x 0.177" H (5.00mm x 5.00mm x 4.50mm)
GateName_1: G$1; DeviceName: RLB0912; SymbolName_1: INDUCTOR; LibraryName: AudioMoth 1.1.0; DeviceSetName: INDUCTOR; Package: RLB0912
footprint RLB0912
pins: 1, 2

## INDUCTORSDR13-7-270ML
designator L?, comment Inductors   Basic Inductor/Choke - 0603 and 1206. Footprints are not proven and vary greatly between part numbers. INDUCTOR POWER 3.3UH 4.0A SMD 0.197" L x 0.197" W x 0.177" H (5.00mm x 5.00mm x 4.50mm)
GateName_1: G$1; DeviceName: SDR13-7-270ML; PROD_ID: NDUC-12529; SymbolName_1: INDUCTOR; LibraryName: AudioMoth 1.1.0; DeviceSetName: INDUCTOR; Package: INDUCTOR_SDR1307
footprint INDUCTOR_SDR1307
pins: P$1 1, P$2 2

## INDUCTORSDR0403-560KL
designator L?, comment Inductors   Basic Inductor/Choke - 0603 and 1206. Footprints are not proven and vary greatly between part numbers. INDUCTOR POWER 3.3UH 4.0A SMD 0.197" L x 0.197" W x 0.177" H (5.00mm x 5.00mm x 4.50mm)
GateName_1: G$1; DeviceName: SDR0403-560KL; DIST: DIGIKEY; DIST_ID: SDR0403-560KLCT-ND; SymbolName_1: INDUCTOR; LibraryName: AudioMoth 1.1.0; DeviceSetName: INDUCTOR; Package: SDR0403
footprint SDR0403
pins: P$1 1, P$2 2

## INDUCTORSRU1038
designator L?, comment Inductors   Basic Inductor/Choke - 0603 and 1206. Footprints are not proven and vary greatly between part numbers. INDUCTOR POWER 3.3UH 4.0A SMD 0.197" L x 0.197" W x 0.177" H (5.00mm x 5.00mm x 4.50mm)
GateName_1: G$1; DeviceName: SRU1038; SymbolName_1: INDUCTOR; LibraryName: AudioMoth 1.1.0; DeviceSetName: INDUCTOR; Package: SRU1038
footprint SRU1038
pins: 1, 2

## INDUCTORSRU5028
designator L?, comment Inductors   Basic Inductor/Choke - 0603 and 1206. Footprints are not proven and vary greatly between part numbers. INDUCTOR POWER 3.3UH 4.0A SMD 0.197" L x 0.197" W x 0.177" H (5.00mm x 5.00mm x 4.50mm)
GateName_1: G$1; DeviceName: SRU5028; SymbolName_1: INDUCTOR; LibraryName: AudioMoth 1.1.0; DeviceSetName: INDUCTOR; Package: SRU5028
footprint SRU5028
pins: 1, 2

## INDUCTORVLF4012A
designator L?, comment Inductors   Basic Inductor/Choke - 0603 and 1206. Footprints are not proven and vary greatly between part numbers. INDUCTOR POWER 3.3UH 4.0A SMD 0.197" L x 0.197" W x 0.177" H (5.00mm x 5.00mm x 4.50mm)
GateName_1: G$1; DeviceName: VLF4012A; SymbolName_1: INDUCTOR; LibraryName: AudioMoth 1.1.0; DeviceSetName: INDUCTOR; Package: VLF4012A
footprint VLF4012A
pins: P$1 1, P$2 2

## IP4220CZ6
designator ?, comment IP4220CZ6     The IP4220CZ6 is designed to protect I/O lines sensitive to capacitive load, such as USB 2.0 http://www.farnell.com/datasheets/1708221.pdf  (value not drawn)
GateName_1: G$1; SymbolName_1: IP4220CZ6; LibraryName: AudioMoth 1.1.0; DeviceSetName: IP4220CZ6; Package: SC-74
footprint SC-74
pins: 1 I/O1 (io), 2 GND (io), 3 I/O2 (io), 4 I/O3 (io), 5 VCC (io), 6 I/O4 (io)

## IS62WV256
designator ?
GateName_1: G$1; SymbolName_1: IS62WV256; LibraryName: AudioMoth 1.1.0; DeviceSetName: IS62WV256; Package: IS62WV256
footprint IS62WV256
pins: 1 A11 (in), 2 A9 (in), 3 A8 (in), 4 A13 (in), 5 !WE (in), 6 CS2 (in), 7 A15 (in), 8 VDD (io), 9 A17 (in), 10 A16 (in), 11 A14 (in), 12 A12 (in), 13 A7 (in), 14 A6 (in), 15 A5 (in), 16 A4 (in), 17 A3 (in), 18 A2 (in), 19 A1 (in), 20 A0 (in), 21 D0 (hiz), 22 D1 (hiz), 23 D2 (hiz), 24 GND (io), 25 D3 (hiz), 26 D4 (hiz), 27 D5 (hiz), 28 D6 (hiz), 29 D7 (hiz), 30 !CE (in), 31 A10 (in), 32 !OE (in)

## LED3MM
designator D?, comment LEDsStandard schematic elements and footprints for 5mm, 3mm, 1206, and 0603 sized LEDs. 5mm - Spark Fun Electronics SKU : COM-00529 (and others)
GateName_1: G$1; SymbolName_1: LED; PROD_ID: DIO-08794; DeviceName: 3MM; LibraryName: AudioMoth 1.1.0; DeviceSetName: LED; Package: LED3MM
footprint LED3MM
pins: A, K C

## LED5MM
designator D?, comment LEDsStandard schematic elements and footprints for 5mm, 3mm, 1206, and 0603 sized LEDs. 5mm - Spark Fun Electronics SKU : COM-00529 (and others)
GateName_1: G$1; SymbolName_1: LED; DeviceName: 5MM; LibraryName: AudioMoth 1.1.0; DeviceSetName: LED; Package: LED5MM
footprint LED5MM
pins: A, K C

## LED5MM-KIT
designator D?, comment LEDsStandard schematic elements and footprints for 5mm, 3mm, 1206, and 0603 sized LEDs. 5mm - Spark Fun Electronics SKU : COM-00529 (and others)
GateName_1: G$1; SymbolName_1: LED; DeviceName: 5MM-KIT; LibraryName: AudioMoth 1.1.0; DeviceSetName: LED; Package: LED5MM-KIT
footprint LED5MM-KIT
pins: A, K C

## LED10MM
designator D?, comment LEDsStandard schematic elements and footprints for 5mm, 3mm, 1206, and 0603 sized LEDs. 5mm - Spark Fun Electronics SKU : COM-00529 (and others)
GateName_1: G$1; SymbolName_1: LED; DeviceName: 10MM; LibraryName: AudioMoth 1.1.0; DeviceSetName: LED; Package: LED10MM
footprint LED10MM
pins: A, C

## LED0603
designator D?, comment LEDsStandard schematic elements and footprints for 5mm, 3mm, 1206, and 0603 sized LEDs. 5mm - Spark Fun Electronics SKU : COM-00529 (and others)
GateName_1: G$1; SymbolName_1: LED; DeviceName: 0603; LibraryName: AudioMoth 1.1.0; DeviceSetName: LED; Package: LED-0603
footprint LED-0603
pins: A, C

## LED1206
designator D?, comment LEDsStandard schematic elements and footprints for 5mm, 3mm, 1206, and 0603 sized LEDs. 5mm - Spark Fun Electronics SKU : COM-00529 (and others)
GateName_1: G$1; SymbolName_1: LED; DeviceName: 1206; LibraryName: AudioMoth 1.1.0; DeviceSetName: LED; Package: LED-1206
footprint LED-1206
pins: A, C

## LED1206-BOTTOM
designator D?, comment LEDsStandard schematic elements and footprints for 5mm, 3mm, 1206, and 0603 sized LEDs. 5mm - Spark Fun Electronics SKU : COM-00529 (and others)
GateName_1: G$1; SymbolName_1: LED; DeviceName: 1206-BOTTOM; LibraryName: AudioMoth 1.1.0; DeviceSetName: LED; Package: LED-1206-BOTTOM
footprint LED-1206-BOTTOM
pins: A, C

## LED-3MM-NO_SILK
designator D?, comment LEDsStandard schematic elements and footprints for 5mm, 3mm, 1206, and 0603 sized LEDs. 5mm - Spark Fun Electronics SKU : COM-00529 (and others)
GateName_1: G$1; SymbolName_1: LED; DeviceName: -3MM-NO_SILK; LibraryName: AudioMoth 1.1.0; DeviceSetName: LED; Package: LED3MM-NS
footprint LED3MM-NS
pins: A, K C

## LED-FKIT-1206
designator D?, comment LEDsStandard schematic elements and footprints for 5mm, 3mm, 1206, and 0603 sized LEDs. 5mm - Spark Fun Electronics SKU : COM-00529 (and others)
GateName_1: G$1; SymbolName_1: LED; DeviceName: -FKIT-1206; LibraryName: AudioMoth 1.1.0; DeviceSetName: LED; Package: FKIT-LED-1206
footprint FKIT-LED-1206
pins: A, C

## LTC1761
designator U?
GateName_1: U$1; SymbolName_1: V-REG-LDO; DeviceSetName: LTC1761; LibraryName: AudioMoth 1.1.0; Package: SOT23-5
footprint SOT23-5
pins: 1 IN (in), 2 GND (in), 3 EN (in), 4 BP (in), 5 OUT

## MA06-1RIGHT_ANGLE
designator SV?, comment PIN HEADER
GateName_1: 1; SymbolName_1: MA06-1; DeviceName: RIGHT_ANGLE; LibraryName: AudioMoth 1.1.0; DeviceSetName: MA06-1; Package: MA06-1W
footprint MA06-1W
pins: 1, 2, 3, 4, 5, 6

## MA06-1SMD_BOARD_EDGE
designator SV?, comment PIN HEADER
GateName_1: 1; SymbolName_1: MA06-1; DeviceName: SMD_BOARD_EDGE; LibraryName: AudioMoth 1.1.0; DeviceSetName: MA06-1; Package: TSM-106-X-SH-BOARDEDGE
footprint TSM-106-X-SH-BOARDEDGE
pins: 1, 2, 3, 4, 5, 6

## MA06-1SMD_RIGHT_ANGLE
designator SV?, comment PIN HEADER
GateName_1: 1; SymbolName_1: MA06-1; DeviceName: SMD_RIGHT_ANGLE; LibraryName: AudioMoth 1.1.0; DeviceSetName: MA06-1; Package: TSM-106-XX-XXX-SH
footprint TSM-106-XX-XXX-SH
pins: 1, 2, 3, 4, 5, 6

## MA06-1STRAIGHT
designator SV?, comment PIN HEADER
GateName_1: 1; SymbolName_1: MA06-1; DeviceName: STRAIGHT; LibraryName: AudioMoth 1.1.0; DeviceSetName: MA06-1; Package: MA06-1; OC_FARNELL: unknown; OC_NEWARK: unknown
footprint MA06-1
pins: 1, 2, 3, 4, 5, 6

## MAX6070SOT23
designator U?
GateName_1: G$1; SymbolName_1: MAX6070; DeviceName: SOT23; LibraryName: AudioMoth 1.1.0; DeviceSetName: MAX6070; Package: SOT26$1
footprint SOT26$1
pins: 1 FILTER (io), 2 GND (io), 3 EN (io), 4 IN (io), 5 OUTS (io), 6 OUTF (io)

## MICROSDIMPROVED?
designator JP?
GateName_1: G$1; SymbolName_1: MICROSD; DeviceName: IMPROVED?; LibraryName: AudioMoth 1.1.0; DeviceSetName: MICROSD; Package: MICROSD_1:1
footprint MICROSD_1:1
pins: 1 DAT2 (io), 2 CD/DAT3 (io), 3 CMD (io), 4 VDD (power), 5 CLK (io), 6 VSS (power), 7 DAT0 (io), 8 DAT1 (io), CD1 CD@1 (io), CD2 CD@2 (io), GND1 SH@1 (io), GND3 SH@2 (io)

## MICROSDOTHER
designator JP?
GateName_1: G$1; SymbolName_1: MICROSD; DeviceName: OTHER; LibraryName: AudioMoth 1.1.0; DeviceSetName: MICROSD; Package: MICRO-SD-SOCKET-PP
footprint MICRO-SD-SOCKET-PP
pins: 1 DAT2 (io), 2 CD/DAT3 (io), 3 CMD (io), 4 VDD (power), 5 CLK (io), 6 VSS (power), 7 DAT0 (io), 8 DAT1 (io), CD1 CD@1 (io), CD2 CD@2 (io), GND1 SH@1 (io), GND3 SH@2 (io)

## MICROSDWE_PACK
designator JP?
GateName_1: G$1; SymbolName_1: MICROSD; DeviceName: WE_PACK; LibraryName: AudioMoth 1.1.0; DeviceSetName: MICROSD; Package: 693071010811
footprint 693071010811
pins: 1 DAT2 (io), 2 CD/DAT3 (io), 3 CMD (io), 4 VDD (power), 5 CLK (io), 6 VSS (power), 7 DAT0 (io), 8 DAT1 (io), Z1 SH@1 (io), Z2 SH@2 (io), Z3 CD@1 (io), Z4 CD@2 (io)